# Altium schematic symbol library Silabs.SchLib: 89 symbols (part 1 of 2)
Pins are listed as number, name and electrical type; pins without a type are passive.

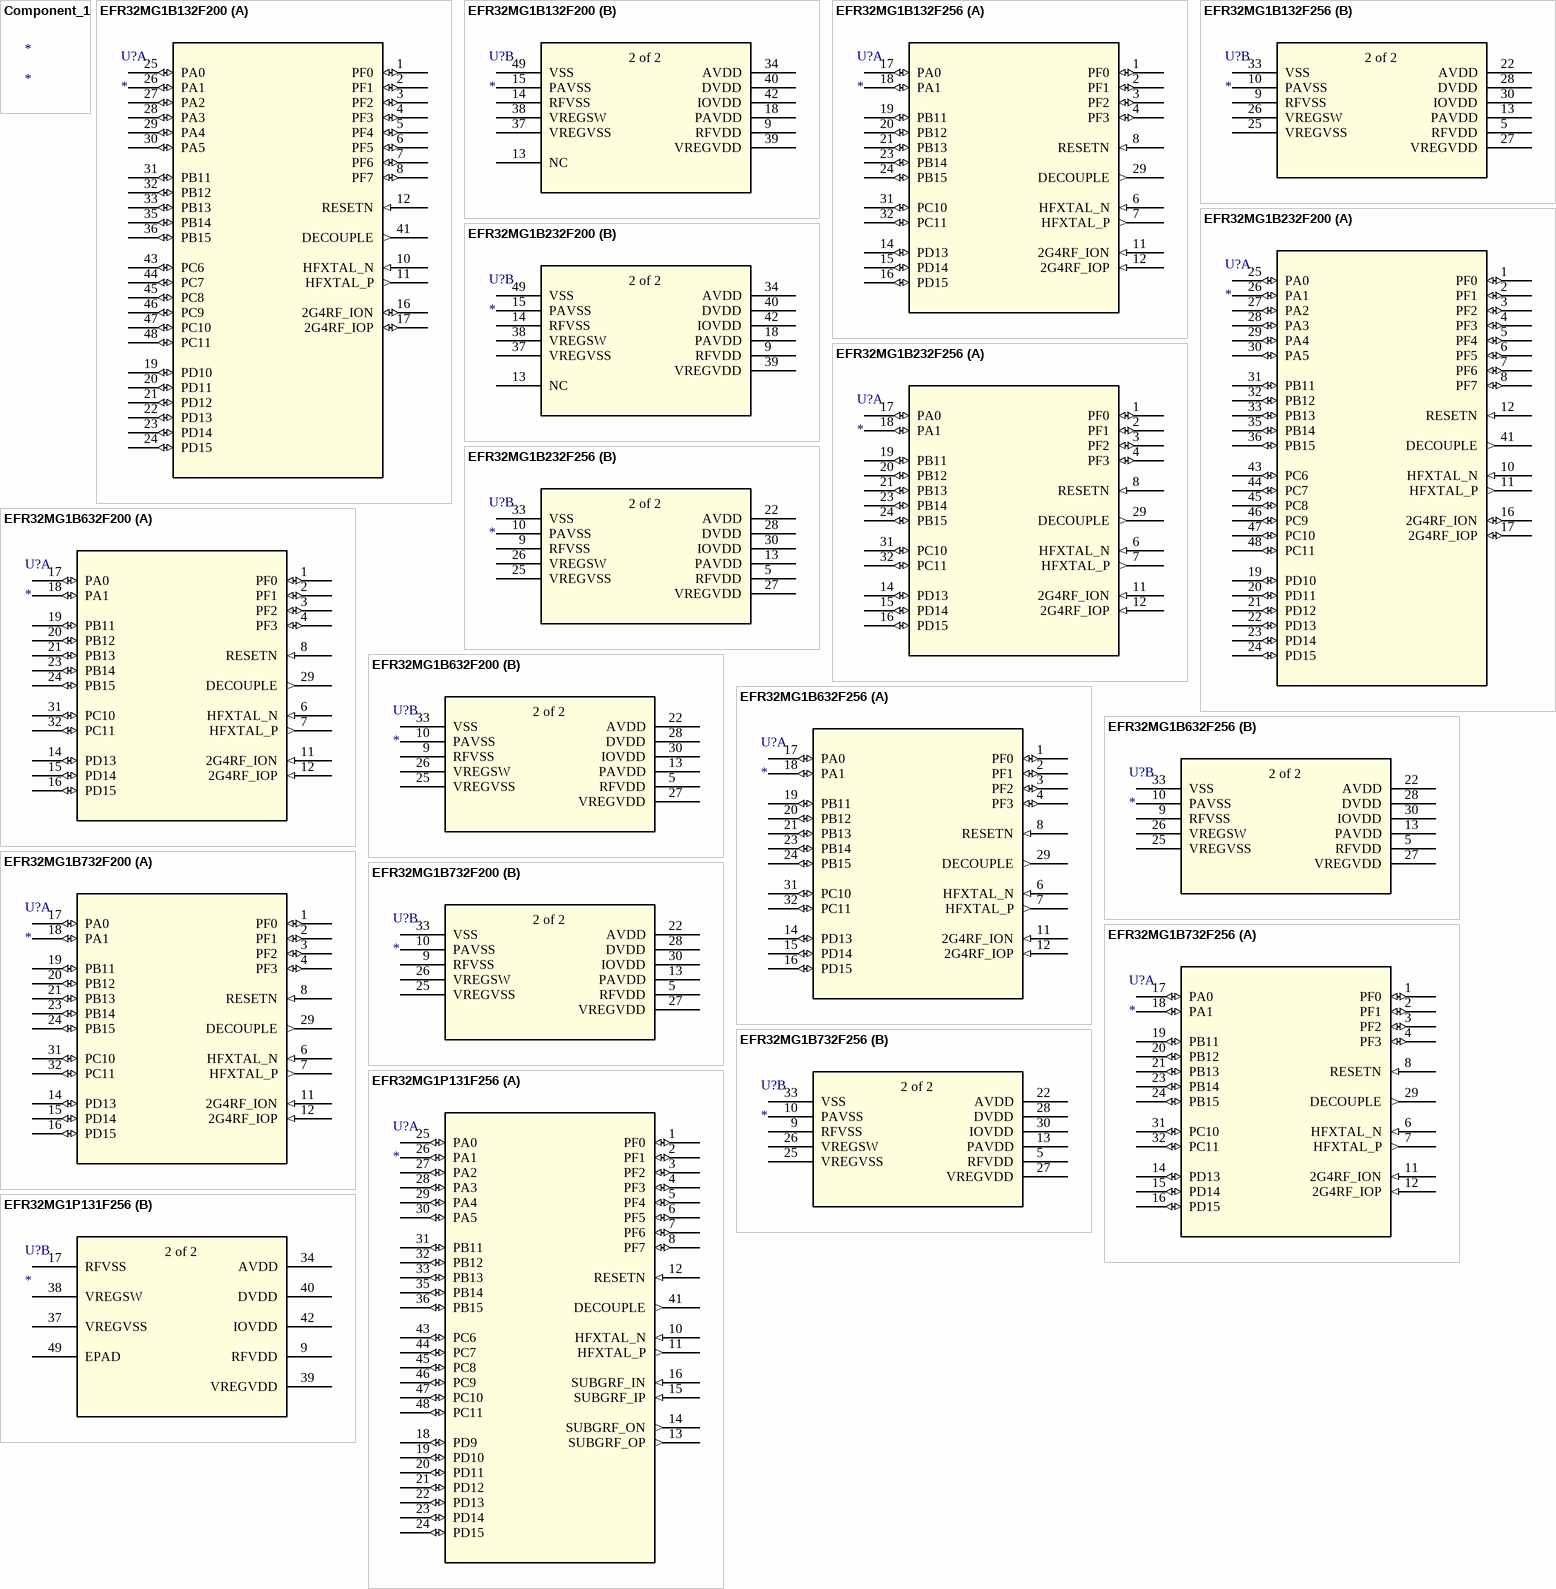
[diagram p0: symbols Component_1 to EFR32MG1P131F256]

## Component_1
designator *

## EFR32MG1B132F200
designator U?
No Description Available; RefDes: RefDes; Type: Type
footprint QFN48B_7X7
part A pins: 1 PF0 (io), 2 PF1 (io), 3 PF2 (io), 4 PF3 (io), 5 PF4 (io), 6 PF5 (io), 7 PF6 (io), 8 PF7 (io), 10 HFXTAL_N (in), 11 HFXTAL_P (out), 12 RESETN (in), 16 2G4RF_ION (io), 17 2G4RF_IOP (io), 19 PD10 (io), 20 PD11 (io), 21 PD12 (io), 22 PD13 (io), 23 PD14 (io), 24 PD15 (io), 25 PA0 (io), 26 PA1 (io), 27 PA2 (io), 28 PA3 (io), 29 PA4 (io), 30 PA5 (io), 31 PB11 (io), 32 PB12 (io), 33 PB13 (io), 35 PB14 (io), 36 PB15 (io), 41 DECOUPLE (out), 43 PC6 (io), 44 PC7 (io), 45 PC8 (io), 46 PC9 (io), 47 PC10 (io), 48 PC11 (io)
part B pins: 9 RFVDD (power), 13 NC, 14 RFVSS (power), 15 PAVSS (power), 18 PAVDD (power), 34 AVDD (power), 37 VREGVSS (power), 38 VREGSW (power), 39 VREGVDD (power), 40 DVDD (power), 42 IOVDD (power), 49 VSS (power)
part B text: 2 of 2

## EFR32MG1B132F256
designator U?
No Description Available; RefDes: RefDes; Type: Type
footprint QFN32_5X5
part A pins: 1 PF0 (io), 2 PF1 (io), 3 PF2 (io), 4 PF3 (io), 6 HFXTAL_N (in), 7 HFXTAL_P (out), 8 RESETN (in), 11 2G4RF_ION (in), 12 2G4RF_IOP (in), 14 PD13 (io), 15 PD14 (io), 16 PD15 (io), 17 PA0 (io), 18 PA1 (io), 19 PB11 (io), 20 PB12 (io), 21 PB13 (io), 23 PB14 (io), 24 PB15 (io), 29 DECOUPLE (out), 31 PC10 (io), 32 PC11 (io)
part B pins: 5 RFVDD (power), 9 RFVSS (power), 10 PAVSS (power), 13 PAVDD (power), 22 AVDD (power), 25 VREGVSS (power), 26 VREGSW (power), 27 VREGVDD (power), 28 DVDD (power), 30 IOVDD (power), 33 VSS (power)
part B text: 2 of 2

## EFR32MG1B232F200
designator U?
No Description Available; RefDes: RefDes; Type: Type
footprint QFN48B_7X7
part A pins: 1 PF0 (io), 2 PF1 (io), 3 PF2 (io), 4 PF3 (io), 5 PF4 (io), 6 PF5 (io), 7 PF6 (io), 8 PF7 (io), 10 HFXTAL_N (in), 11 HFXTAL_P (out), 12 RESETN (in), 16 2G4RF_ION (io), 17 2G4RF_IOP (io), 19 PD10 (io), 20 PD11 (io), 21 PD12 (io), 22 PD13 (io), 23 PD14 (io), 24 PD15 (io), 25 PA0 (io), 26 PA1 (io), 27 PA2 (io), 28 PA3 (io), 29 PA4 (io), 30 PA5 (io), 31 PB11 (io), 32 PB12 (io), 33 PB13 (io), 35 PB14 (io), 36 PB15 (io), 41 DECOUPLE (out), 43 PC6 (io), 44 PC7 (io), 45 PC8 (io), 46 PC9 (io), 47 PC10 (io), 48 PC11 (io)
part B pins: 9 RFVDD (power), 13 NC, 14 RFVSS (power), 15 PAVSS (power), 18 PAVDD (power), 34 AVDD (power), 37 VREGVSS (power), 38 VREGSW (power), 39 VREGVDD (power), 40 DVDD (power), 42 IOVDD (power), 49 VSS (power)
part B text: 2 of 2

## EFR32MG1B232F256
designator U?
No Description Available; RefDes: RefDes; Type: Type
footprint QFN32_5X5
part A pins: 1 PF0 (io), 2 PF1 (io), 3 PF2 (io), 4 PF3 (io), 6 HFXTAL_N (in), 7 HFXTAL_P (out), 8 RESETN (in), 11 2G4RF_ION (in), 12 2G4RF_IOP (in), 14 PD13 (io), 15 PD14 (io), 16 PD15 (io), 17 PA0 (io), 18 PA1 (io), 19 PB11 (io), 20 PB12 (io), 21 PB13 (io), 23 PB14 (io), 24 PB15 (io), 29 DECOUPLE (out), 31 PC10 (io), 32 PC11 (io)
part B pins: 5 RFVDD (power), 9 RFVSS (power), 10 PAVSS (power), 13 PAVDD (power), 22 AVDD (power), 25 VREGVSS (power), 26 VREGSW (power), 27 VREGVDD (power), 28 DVDD (power), 30 IOVDD (power), 33 VSS (power)
part B text: 2 of 2

## EFR32MG1B632F200
designator U?
No Description Available; RefDes: RefDes; Type: Type
footprint QFN32_5X5
part A pins: 1 PF0 (io), 2 PF1 (io), 3 PF2 (io), 4 PF3 (io), 6 HFXTAL_N (in), 7 HFXTAL_P (out), 8 RESETN (in), 11 2G4RF_ION (in), 12 2G4RF_IOP (in), 14 PD13 (io), 15 PD14 (io), 16 PD15 (io), 17 PA0 (io), 18 PA1 (io), 19 PB11 (io), 20 PB12 (io), 21 PB13 (io), 23 PB14 (io), 24 PB15 (io), 29 DECOUPLE (out), 31 PC10 (io), 32 PC11 (io)
part B pins: 5 RFVDD (power), 9 RFVSS (power), 10 PAVSS (power), 13 PAVDD (power), 22 AVDD (power), 25 VREGVSS (power), 26 VREGSW (power), 27 VREGVDD (power), 28 DVDD (power), 30 IOVDD (power), 33 VSS (power)
part B text: 2 of 2

## EFR32MG1B632F256
designator U?
No Description Available; RefDes: RefDes; Type: Type
footprint QFN32_5X5
part A pins: 1 PF0 (io), 2 PF1 (io), 3 PF2 (io), 4 PF3 (io), 6 HFXTAL_N (in), 7 HFXTAL_P (out), 8 RESETN (in), 11 2G4RF_ION (in), 12 2G4RF_IOP (in), 14 PD13 (io), 15 PD14 (io), 16 PD15 (io), 17 PA0 (io), 18 PA1 (io), 19 PB11 (io), 20 PB12 (io), 21 PB13 (io), 23 PB14 (io), 24 PB15 (io), 29 DECOUPLE (out), 31 PC10 (io), 32 PC11 (io)
part B pins: 5 RFVDD (power), 9 RFVSS (power), 10 PAVSS (power), 13 PAVDD (power), 22 AVDD (power), 25 VREGVSS (power), 26 VREGSW (power), 27 VREGVDD (power), 28 DVDD (power), 30 IOVDD (power), 33 VSS (power)
part B text: 2 of 2

## EFR32MG1B732F200
designator U?
No Description Available; RefDes: RefDes; Type: Type
footprint QFN32_5X5
part A pins: 1 PF0 (io), 2 PF1 (io), 3 PF2 (io), 4 PF3 (io), 6 HFXTAL_N (in), 7 HFXTAL_P (out), 8 RESETN (in), 11 2G4RF_ION (in), 12 2G4RF_IOP (in), 14 PD13 (io), 15 PD14 (io), 16 PD15 (io), 17 PA0 (io), 18 PA1 (io), 19 PB11 (io), 20 PB12 (io), 21 PB13 (io), 23 PB14 (io), 24 PB15 (io), 29 DECOUPLE (out), 31 PC10 (io), 32 PC11 (io)
part B pins: 5 RFVDD (power), 9 RFVSS (power), 10 PAVSS (power), 13 PAVDD (power), 22 AVDD (power), 25 VREGVSS (power), 26 VREGSW (power), 27 VREGVDD (power), 28 DVDD (power), 30 IOVDD (power), 33 VSS (power)
part B text: 2 of 2

## EFR32MG1B732F256
designator U?
No Description Available; RefDes: RefDes; Type: Type
footprint QFN32_5X5
part A pins: 1 PF0 (io), 2 PF1 (io), 3 PF2 (io), 4 PF3 (io), 6 HFXTAL_N (in), 7 HFXTAL_P (out), 8 RESETN (in), 11 2G4RF_ION (in), 12 2G4RF_IOP (in), 14 PD13 (io), 15 PD14 (io), 16 PD15 (io), 17 PA0 (io), 18 PA1 (io), 19 PB11 (io), 20 PB12 (io), 21 PB13 (io), 23 PB14 (io), 24 PB15 (io), 29 DECOUPLE (out), 31 PC10 (io), 32 PC11 (io)
part B pins: 5 RFVDD (power), 9 RFVSS (power), 10 PAVSS (power), 13 PAVDD (power), 22 AVDD (power), 25 VREGVSS (power), 26 VREGSW (power), 27 VREGVDD (power), 28 DVDD (power), 30 IOVDD (power), 33 VSS (power)
part B text: 2 of 2

## EFR32MG1P131F256
designator U?
No Description Available; RefDes: RefDes; Type: Type
footprint QFN48_7X7
part A pins: 1 PF0 (io), 2 PF1 (io), 3 PF2 (io), 4 PF3 (io), 5 PF4 (io), 6 PF5 (io), 7 PF6 (io), 8 PF7 (io), 10 HFXTAL_N (in), 11 HFXTAL_P (out), 12 RESETN (in), 13 SUBGRF_OP (out), 14 SUBGRF_ON (out), 15 SUBGRF_IP (in), 16 SUBGRF_IN (in), 18 PD9 (io), 19 PD10 (io), 20 PD11 (io), 21 PD12 (io), 22 PD13 (io), 23 PD14 (io), 24 PD15 (io), 25 PA0 (io), 26 PA1 (io), 27 PA2 (io), 28 PA3 (io), 29 PA4 (io), 30 PA5 (io), 31 PB11 (io), 32 PB12 (io), 33 PB13 (io), 35 PB14 (io), 36 PB15 (io), 41 DECOUPLE (out), 43 PC6 (io), 44 PC7 (io), 45 PC8 (io), 46 PC9 (io), 47 PC10 (io), 48 PC11 (io)
part B pins: 9 RFVDD (power), 17 RFVSS (power), 34 AVDD (power), 37 VREGVSS (power), 38 VREGSW (power), 39 VREGVDD (power), 40 DVDD (power), 42 IOVDD (power), 49 EPAD
part B text: 2 of 2

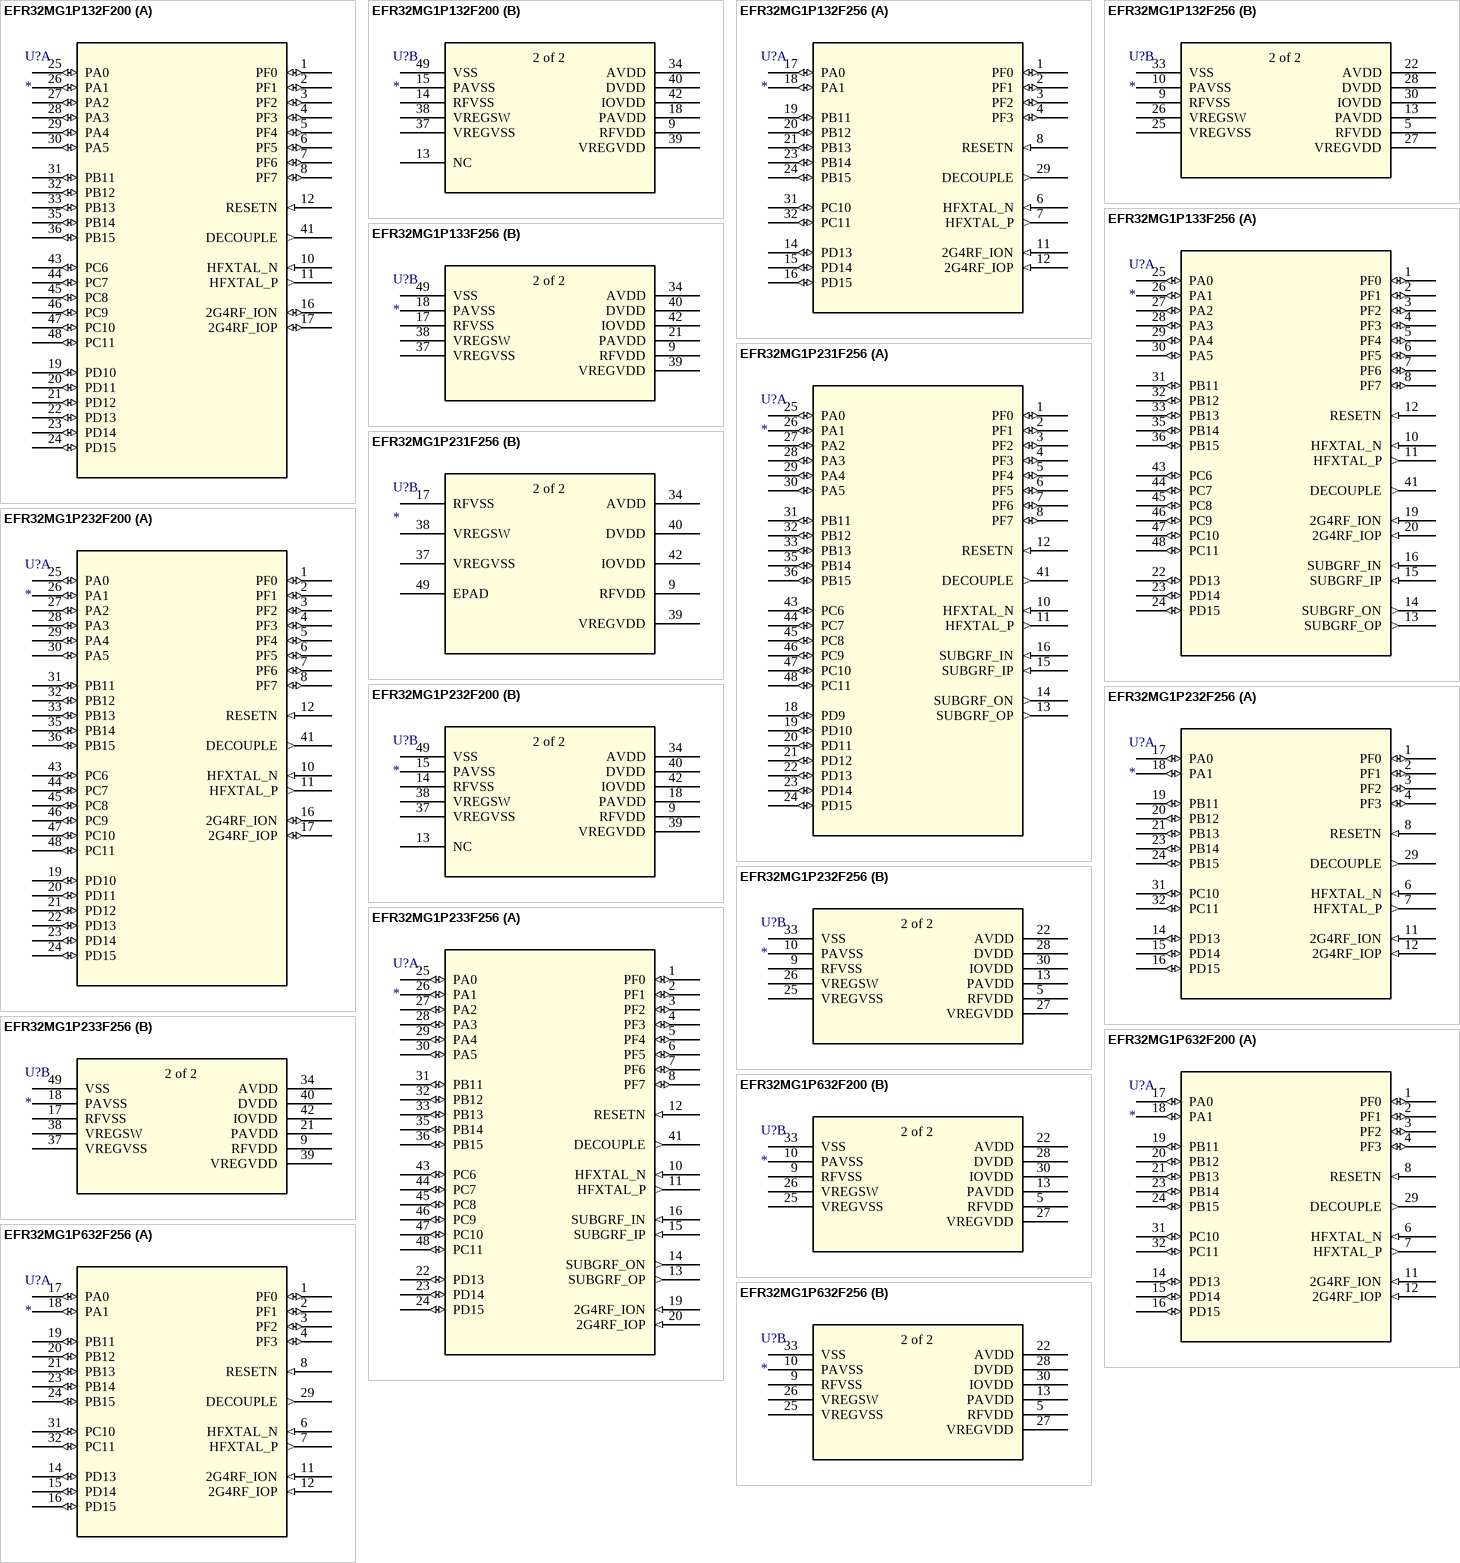
[diagram p1: symbols EFR32MG1P132F200 to EFR32MG1P632F256]

## EFR32MG1P132F200
designator U?
No Description Available; RefDes: RefDes; Type: Type
footprint QFN48B_7X7
part A pins: 1 PF0 (io), 2 PF1 (io), 3 PF2 (io), 4 PF3 (io), 5 PF4 (io), 6 PF5 (io), 7 PF6 (io), 8 PF7 (io), 10 HFXTAL_N (in), 11 HFXTAL_P (out), 12 RESETN (in), 16 2G4RF_ION (io), 17 2G4RF_IOP (io), 19 PD10 (io), 20 PD11 (io), 21 PD12 (io), 22 PD13 (io), 23 PD14 (io), 24 PD15 (io), 25 PA0 (io), 26 PA1 (io), 27 PA2 (io), 28 PA3 (io), 29 PA4 (io), 30 PA5 (io), 31 PB11 (io), 32 PB12 (io), 33 PB13 (io), 35 PB14 (io), 36 PB15 (io), 41 DECOUPLE (out), 43 PC6 (io), 44 PC7 (io), 45 PC8 (io), 46 PC9 (io), 47 PC10 (io), 48 PC11 (io)
part B pins: 9 RFVDD (power), 13 NC, 14 RFVSS (power), 15 PAVSS (power), 18 PAVDD (power), 34 AVDD (power), 37 VREGVSS (power), 38 VREGSW (power), 39 VREGVDD (power), 40 DVDD (power), 42 IOVDD (power), 49 VSS (power)
part B text: 2 of 2

## EFR32MG1P132F256
designator U?
No Description Available; RefDes: RefDes; Type: Type
footprint QFN32_5X5
part A pins: 1 PF0 (io), 2 PF1 (io), 3 PF2 (io), 4 PF3 (io), 6 HFXTAL_N (in), 7 HFXTAL_P (out), 8 RESETN (in), 11 2G4RF_ION (in), 12 2G4RF_IOP (in), 14 PD13 (io), 15 PD14 (io), 16 PD15 (io), 17 PA0 (io), 18 PA1 (io), 19 PB11 (io), 20 PB12 (io), 21 PB13 (io), 23 PB14 (io), 24 PB15 (io), 29 DECOUPLE (out), 31 PC10 (io), 32 PC11 (io)
part B pins: 5 RFVDD (power), 9 RFVSS (power), 10 PAVSS (power), 13 PAVDD (power), 22 AVDD (power), 25 VREGVSS (power), 26 VREGSW (power), 27 VREGVDD (power), 28 DVDD (power), 30 IOVDD (power), 33 VSS (power)
part B text: 2 of 2

## EFR32MG1P133F256
designator U?
No Description Available; RefDes: RefDes; Type: Type
footprint QFN48B_7X7
part A pins: 1 PF0 (io), 2 PF1 (io), 3 PF2 (io), 4 PF3 (io), 5 PF4 (io), 6 PF5 (io), 7 PF6 (io), 8 PF7 (io), 10 HFXTAL_N (in), 11 HFXTAL_P (out), 12 RESETN (in), 13 SUBGRF_OP (out), 14 SUBGRF_ON (out), 15 SUBGRF_IP (in), 16 SUBGRF_IN (in), 19 2G4RF_ION (in), 20 2G4RF_IOP (in), 22 PD13 (io), 23 PD14 (io), 24 PD15 (io), 25 PA0 (io), 26 PA1 (io), 27 PA2 (io), 28 PA3 (io), 29 PA4 (io), 30 PA5 (io), 31 PB11 (io), 32 PB12 (io), 33 PB13 (io), 35 PB14 (io), 36 PB15 (io), 41 DECOUPLE (out), 43 PC6 (io), 44 PC7 (io), 45 PC8 (io), 46 PC9 (io), 47 PC10 (io), 48 PC11 (io)
part B pins: 9 RFVDD (power), 17 RFVSS (power), 18 PAVSS (power), 21 PAVDD (power), 34 AVDD (power), 37 VREGVSS (power), 38 VREGSW (power), 39 VREGVDD (power), 40 DVDD (power), 42 IOVDD (power), 49 VSS (power)
part B text: 2 of 2

## EFR32MG1P231F256
designator U?
No Description Available; RefDes: RefDes; Type: Type
footprint QFN48_7X7
part A pins: 1 PF0 (io), 2 PF1 (io), 3 PF2 (io), 4 PF3 (io), 5 PF4 (io), 6 PF5 (io), 7 PF6 (io), 8 PF7 (io), 10 HFXTAL_N (in), 11 HFXTAL_P (out), 12 RESETN (in), 13 SUBGRF_OP (out), 14 SUBGRF_ON (out), 15 SUBGRF_IP (in), 16 SUBGRF_IN (in), 18 PD9 (io), 19 PD10 (io), 20 PD11 (io), 21 PD12 (io), 22 PD13 (io), 23 PD14 (io), 24 PD15 (io), 25 PA0 (io), 26 PA1 (io), 27 PA2 (io), 28 PA3 (io), 29 PA4 (io), 30 PA5 (io), 31 PB11 (io), 32 PB12 (io), 33 PB13 (io), 35 PB14 (io), 36 PB15 (io), 41 DECOUPLE (out), 43 PC6 (io), 44 PC7 (io), 45 PC8 (io), 46 PC9 (io), 47 PC10 (io), 48 PC11 (io)
part B pins: 9 RFVDD (power), 17 RFVSS (power), 34 AVDD (power), 37 VREGVSS (power), 38 VREGSW (power), 39 VREGVDD (power), 40 DVDD (power), 42 IOVDD (power), 49 EPAD
part B text: 2 of 2

## EFR32MG1P232F200
designator U?
No Description Available; RefDes: RefDes; Type: Type
footprint QFN48B_7X7
part A pins: 1 PF0 (io), 2 PF1 (io), 3 PF2 (io), 4 PF3 (io), 5 PF4 (io), 6 PF5 (io), 7 PF6 (io), 8 PF7 (io), 10 HFXTAL_N (in), 11 HFXTAL_P (out), 12 RESETN (in), 16 2G4RF_ION (io), 17 2G4RF_IOP (io), 19 PD10 (io), 20 PD11 (io), 21 PD12 (io), 22 PD13 (io), 23 PD14 (io), 24 PD15 (io), 25 PA0 (io), 26 PA1 (io), 27 PA2 (io), 28 PA3 (io), 29 PA4 (io), 30 PA5 (io), 31 PB11 (io), 32 PB12 (io), 33 PB13 (io), 35 PB14 (io), 36 PB15 (io), 41 DECOUPLE (out), 43 PC6 (io), 44 PC7 (io), 45 PC8 (io), 46 PC9 (io), 47 PC10 (io), 48 PC11 (io)
part B pins: 9 RFVDD (power), 13 NC, 14 RFVSS (power), 15 PAVSS (power), 18 PAVDD (power), 34 AVDD (power), 37 VREGVSS (power), 38 VREGSW (power), 39 VREGVDD (power), 40 DVDD (power), 42 IOVDD (power), 49 VSS (power)
part B text: 2 of 2

## EFR32MG1P232F256
designator U?
No Description Available; RefDes: RefDes; Type: Type
footprint QFN32_5X5
part A pins: 1 PF0 (io), 2 PF1 (io), 3 PF2 (io), 4 PF3 (io), 6 HFXTAL_N (in), 7 HFXTAL_P (out), 8 RESETN (in), 11 2G4RF_ION (in), 12 2G4RF_IOP (in), 14 PD13 (io), 15 PD14 (io), 16 PD15 (io), 17 PA0 (io), 18 PA1 (io), 19 PB11 (io), 20 PB12 (io), 21 PB13 (io), 23 PB14 (io), 24 PB15 (io), 29 DECOUPLE (out), 31 PC10 (io), 32 PC11 (io)
part B pins: 5 RFVDD (power), 9 RFVSS (power), 10 PAVSS (power), 13 PAVDD (power), 22 AVDD (power), 25 VREGVSS (power), 26 VREGSW (power), 27 VREGVDD (power), 28 DVDD (power), 30 IOVDD (power), 33 VSS (power)
part B text: 2 of 2

## EFR32MG1P233F256
designator U?
No Description Available; RefDes: RefDes; Type: Type
footprint QFN48B_7X7
part A pins: 1 PF0 (io), 2 PF1 (io), 3 PF2 (io), 4 PF3 (io), 5 PF4 (io), 6 PF5 (io), 7 PF6 (io), 8 PF7 (io), 10 HFXTAL_N (in), 11 HFXTAL_P (out), 12 RESETN (in), 13 SUBGRF_OP (out), 14 SUBGRF_ON (out), 15 SUBGRF_IP (in), 16 SUBGRF_IN (in), 19 2G4RF_ION (in), 20 2G4RF_IOP (in), 22 PD13 (io), 23 PD14 (io), 24 PD15 (io), 25 PA0 (io), 26 PA1 (io), 27 PA2 (io), 28 PA3 (io), 29 PA4 (io), 30 PA5 (io), 31 PB11 (io), 32 PB12 (io), 33 PB13 (io), 35 PB14 (io), 36 PB15 (io), 41 DECOUPLE (out), 43 PC6 (io), 44 PC7 (io), 45 PC8 (io), 46 PC9 (io), 47 PC10 (io), 48 PC11 (io)
part B pins: 9 RFVDD (power), 17 RFVSS (power), 18 PAVSS (power), 21 PAVDD (power), 34 AVDD (power), 37 VREGVSS (power), 38 VREGSW (power), 39 VREGVDD (power), 40 DVDD (power), 42 IOVDD (power), 49 VSS (power)
part B text: 2 of 2

## EFR32MG1P632F200
designator U?
No Description Available; RefDes: RefDes; Type: Type
footprint QFN32_5X5
part A pins: 1 PF0 (io), 2 PF1 (io), 3 PF2 (io), 4 PF3 (io), 6 HFXTAL_N (in), 7 HFXTAL_P (out), 8 RESETN (in), 11 2G4RF_ION (in), 12 2G4RF_IOP (in), 14 PD13 (io), 15 PD14 (io), 16 PD15 (io), 17 PA0 (io), 18 PA1 (io), 19 PB11 (io), 20 PB12 (io), 21 PB13 (io), 23 PB14 (io), 24 PB15 (io), 29 DECOUPLE (out), 31 PC10 (io), 32 PC11 (io)
part B pins: 5 RFVDD (power), 9 RFVSS (power), 10 PAVSS (power), 13 PAVDD (power), 22 AVDD (power), 25 VREGVSS (power), 26 VREGSW (power), 27 VREGVDD (power), 28 DVDD (power), 30 IOVDD (power), 33 VSS (power)
part B text: 2 of 2

## EFR32MG1P632F256
designator U?
No Description Available; RefDes: RefDes; Type: Type
footprint QFN32_5X5
part A pins: 1 PF0 (io), 2 PF1 (io), 3 PF2 (io), 4 PF3 (io), 6 HFXTAL_N (in), 7 HFXTAL_P (out), 8 RESETN (in), 11 2G4RF_ION (in), 12 2G4RF_IOP (in), 14 PD13 (io), 15 PD14 (io), 16 PD15 (io), 17 PA0 (io), 18 PA1 (io), 19 PB11 (io), 20 PB12 (io), 21 PB13 (io), 23 PB14 (io), 24 PB15 (io), 29 DECOUPLE (out), 31 PC10 (io), 32 PC11 (io)
part B pins: 5 RFVDD (power), 9 RFVSS (power), 10 PAVSS (power), 13 PAVDD (power), 22 AVDD (power), 25 VREGVSS (power), 26 VREGSW (power), 27 VREGVDD (power), 28 DVDD (power), 30 IOVDD (power), 33 VSS (power)
part B text: 2 of 2

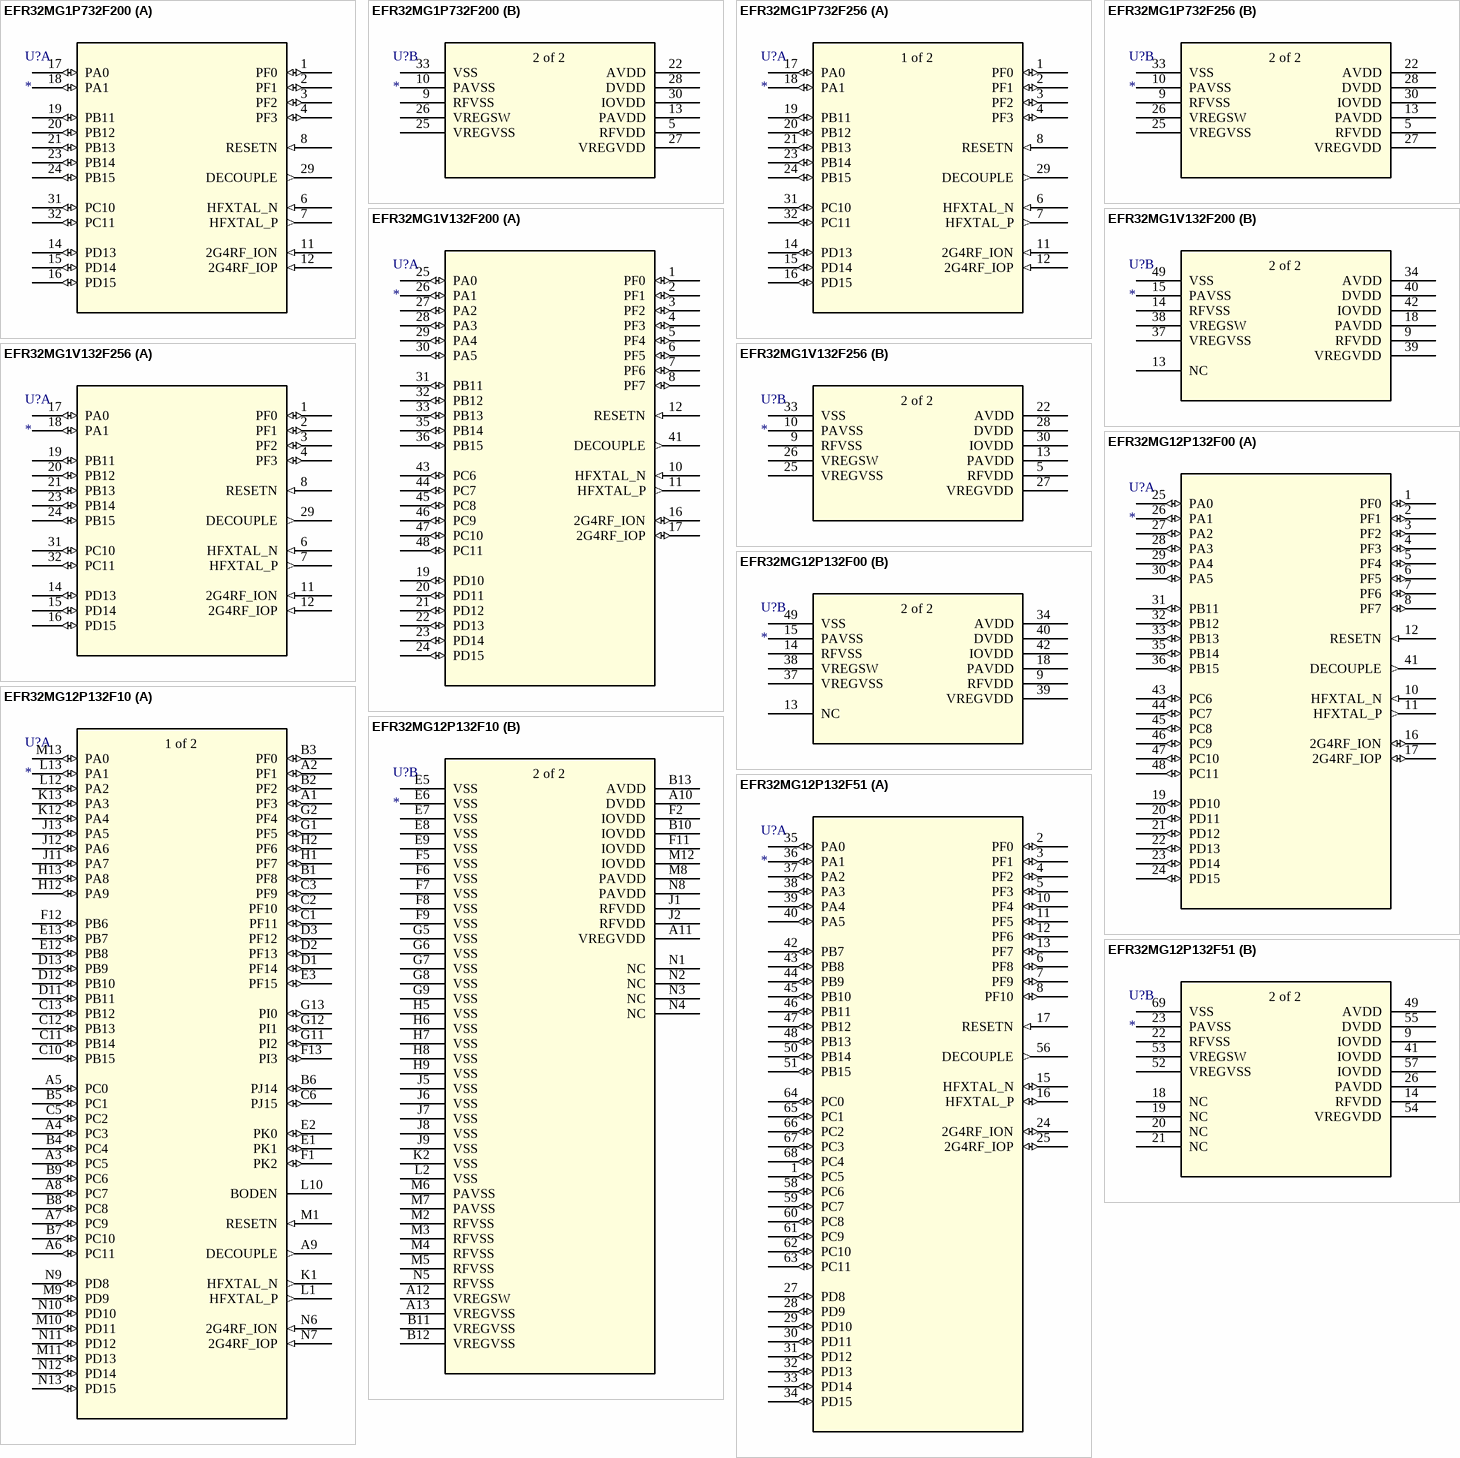
[diagram p2: symbols EFR32MG1P732F200 to EFR32MG12P132F51]

## EFR32MG1P732F200
designator U?
No Description Available; RefDes: RefDes; Type: Type
footprint QFN32_5X5
part A pins: 1 PF0 (io), 2 PF1 (io), 3 PF2 (io), 4 PF3 (io), 6 HFXTAL_N (in), 7 HFXTAL_P (out), 8 RESETN (in), 11 2G4RF_ION (in), 12 2G4RF_IOP (in), 14 PD13 (io), 15 PD14 (io), 16 PD15 (io), 17 PA0 (io), 18 PA1 (io), 19 PB11 (io), 20 PB12 (io), 21 PB13 (io), 23 PB14 (io), 24 PB15 (io), 29 DECOUPLE (out), 31 PC10 (io), 32 PC11 (io)
part B pins: 5 RFVDD (power), 9 RFVSS (power), 10 PAVSS (power), 13 PAVDD (power), 22 AVDD (power), 25 VREGVSS (power), 26 VREGSW (power), 27 VREGVDD (power), 28 DVDD (power), 30 IOVDD (power), 33 VSS (power)
part B text: 2 of 2

## EFR32MG1P732F256
designator U?
No Description Available; RefDes: RefDes; Type: Type
footprint QFN32_5X5
part A pins: 1 PF0 (io), 2 PF1 (io), 3 PF2 (io), 4 PF3 (io), 6 HFXTAL_N (in), 7 HFXTAL_P (out), 8 RESETN (in), 11 2G4RF_ION (in), 12 2G4RF_IOP (in), 14 PD13 (io), 15 PD14 (io), 16 PD15 (io), 17 PA0 (io), 18 PA1 (io), 19 PB11 (io), 20 PB12 (io), 21 PB13 (io), 23 PB14 (io), 24 PB15 (io), 29 DECOUPLE (out), 31 PC10 (io), 32 PC11 (io)
part B pins: 5 RFVDD (power), 9 RFVSS (power), 10 PAVSS (power), 13 PAVDD (power), 22 AVDD (power), 25 VREGVSS (power), 26 VREGSW (power), 27 VREGVDD (power), 28 DVDD (power), 30 IOVDD (power), 33 VSS (power)
part A text: 1 of 2
part B text: 2 of 2

## EFR32MG1V132F200
designator U?
No Description Available; RefDes: RefDes; Type: Type
footprint QFN48B_7X7
part A pins: 1 PF0 (io), 2 PF1 (io), 3 PF2 (io), 4 PF3 (io), 5 PF4 (io), 6 PF5 (io), 7 PF6 (io), 8 PF7 (io), 10 HFXTAL_N (in), 11 HFXTAL_P (out), 12 RESETN (in), 16 2G4RF_ION (io), 17 2G4RF_IOP (io), 19 PD10 (io), 20 PD11 (io), 21 PD12 (io), 22 PD13 (io), 23 PD14 (io), 24 PD15 (io), 25 PA0 (io), 26 PA1 (io), 27 PA2 (io), 28 PA3 (io), 29 PA4 (io), 30 PA5 (io), 31 PB11 (io), 32 PB12 (io), 33 PB13 (io), 35 PB14 (io), 36 PB15 (io), 41 DECOUPLE (out), 43 PC6 (io), 44 PC7 (io), 45 PC8 (io), 46 PC9 (io), 47 PC10 (io), 48 PC11 (io)
part B pins: 9 RFVDD (power), 13 NC, 14 RFVSS (power), 15 PAVSS (power), 18 PAVDD (power), 34 AVDD (power), 37 VREGVSS (power), 38 VREGSW (power), 39 VREGVDD (power), 40 DVDD (power), 42 IOVDD (power), 49 VSS (power)
part B text: 2 of 2

## EFR32MG1V132F256
designator U?
No Description Available; RefDes: RefDes; Type: Type
footprint QFN32_5X5
part A pins: 1 PF0 (io), 2 PF1 (io), 3 PF2 (io), 4 PF3 (io), 6 HFXTAL_N (in), 7 HFXTAL_P (out), 8 RESETN (in), 11 2G4RF_ION (in), 12 2G4RF_IOP (in), 14 PD13 (io), 15 PD14 (io), 16 PD15 (io), 17 PA0 (io), 18 PA1 (io), 19 PB11 (io), 20 PB12 (io), 21 PB13 (io), 23 PB14 (io), 24 PB15 (io), 29 DECOUPLE (out), 31 PC10 (io), 32 PC11 (io)
part B pins: 5 RFVDD (power), 9 RFVSS (power), 10 PAVSS (power), 13 PAVDD (power), 22 AVDD (power), 25 VREGVSS (power), 26 VREGSW (power), 27 VREGVDD (power), 28 DVDD (power), 30 IOVDD (power), 33 VSS (power)
part B text: 2 of 2

## EFR32MG12P132F00
designator U?
No Description Available; RefDes: RefDes; Type: Type
footprint QFN48B_7X7
part A pins: 1 PF0 (io), 2 PF1 (io), 3 PF2 (io), 4 PF3 (io), 5 PF4 (io), 6 PF5 (io), 7 PF6 (io), 8 PF7 (io), 10 HFXTAL_N (in), 11 HFXTAL_P (out), 12 RESETN (in), 16 2G4RF_ION (io), 17 2G4RF_IOP (io), 19 PD10 (io), 20 PD11 (io), 21 PD12 (io), 22 PD13 (io), 23 PD14 (io), 24 PD15 (io), 25 PA0 (io), 26 PA1 (io), 27 PA2 (io), 28 PA3 (io), 29 PA4 (io), 30 PA5 (io), 31 PB11 (io), 32 PB12 (io), 33 PB13 (io), 35 PB14 (io), 36 PB15 (io), 41 DECOUPLE (out), 43 PC6 (io), 44 PC7 (io), 45 PC8 (io), 46 PC9 (io), 47 PC10 (io), 48 PC11 (io)
part B pins: 9 RFVDD (power), 13 NC, 14 RFVSS (power), 15 PAVSS (power), 18 PAVDD (power), 34 AVDD (power), 37 VREGVSS (power), 38 VREGSW (power), 39 VREGVDD (power), 40 DVDD (power), 42 IOVDD (power), 49 VSS (power)
part B text: 2 of 2

## EFR32MG12P132F10
designator U?
No Description Available; RefDes: RefDes; Type: Type
footprint BGA125_7X7
part A pins: A1 PF3 (io), A2 PF1 (io), A3 PC5 (io), A4 PC3 (io), A5 PC0 (io), A6 PC11 (io), A7 PC9 (io), A8 PC7 (io), A9 DECOUPLE (out), B1 PF8 (io), B2 PF2 (io), B3 PF0 (io), B4 PC4 (io), B5 PC1 (io), B6 PJ14 (io), B7 PC10 (io), B8 PC8 (io), B9 PC6 (io), C1 PF11 (io), C2 PF10 (io), C3 PF9 (io), C5 PC2 (io), C6 PJ15 (io), C10 PB15 (io), C11 PB14 (io), C12 PB13 (io), C13 PB12 (io), D1 PF14 (io), D2 PF13 (io), D3 PF12 (io), D11 PB11 (io), D12 PB10 (io), D13 PB9 (io), E1 PK1 (io), E2 PK0 (io), E3 PF15 (io), E12 PB8 (io), E13 PB7 (io), F1 PK2 (io), F12 PB6 (io), F13 PI3 (io), G1 PF5 (io), G2 PF4 (io), G11 PI2 (io), G12 PI1 (io), G13 PI0 (io), H1 PF7 (io), H2 PF6 (io), H12 PA9 (io), H13 PA8 (io), J11 PA7 (io), J12 PA6 (io), J13 PA5 (io), K1 HFXTAL_N (out), K12 PA4 (io), K13 PA3 (io), L1 HFXTAL_P (out), L10 BODEN, L12 PA2 (io), L13 PA1 (io), M1 RESETN (in), M9 PD9 (io), M10 PD11 (io), M11 PD13 (io), M13 PA0 (io), N6 2G4RF_ION (in), N7 2G4RF_IOP (in), N9 PD8 (io), N10 PD10 (io), N11 PD12 (io), N12 PD14 (io), N13 PD15 (io)
part B pins: A10 DVDD (power), A11 VREGVDD (power), A12 VREGSW (power), A13 VREGVSS (power), B10 IOVDD (power), B11 VREGVSS (power), B12 VREGVSS (power), B13 AVDD (power), E5 VSS (power), E6 VSS (power), E7 VSS (power), E8 VSS (power), E9 VSS (power), F2 IOVDD (power), F5 VSS (power), F6 VSS (power), F7 VSS (power), F8 VSS (power), F9 VSS (power), F11 IOVDD (power), G5 VSS (power), G6 VSS (power), G7 VSS (power), G8 VSS (power), G9 VSS (power), H5 VSS (power), H6 VSS (power), H7 VSS (power), H8 VSS (power), H9 VSS (power), J1 RFVDD (power), J2 RFVDD (power), J5 VSS (power), J6 VSS (power), J7 VSS (power), J8 VSS (power), J9 VSS (power), K2 VSS (power), L2 VSS (power), M2 RFVSS (power), M3 RFVSS (power), M4 RFVSS (power), M5 RFVSS (power), M6 PAVSS (power), M7 PAVSS (power), M8 PAVDD (power), M12 IOVDD (power), N1 NC, N2 NC, N3 NC, N4 NC, N5 RFVSS (power), N8 PAVDD (power)
part A text: 1 of 2
part B text: 2 of 2

## EFR32MG12P132F51
designator U?
No Description Available; RefDes: RefDes; Type: Type
footprint QFN68_8X8
part A pins: 1 PC5 (io), 2 PF0 (io), 3 PF1 (io), 4 PF2 (io), 5 PF3 (io), 6 PF8 (io), 7 PF9 (io), 8 PF10 (io), 10 PF4 (io), 11 PF5 (io), 12 PF6 (io), 13 PF7 (io), 15 HFXTAL_N (io), 16 HFXTAL_P (io), 17 RESETN (in), 24 2G4RF_ION (io), 25 2G4RF_IOP (io), 27 PD8 (io), 28 PD9 (io), 29 PD10 (io), 30 PD11 (io), 31 PD12 (io), 32 PD13 (io), 33 PD14 (io), 34 PD15 (io), 35 PA0 (io), 36 PA1 (io), 37 PA2 (io), 38 PA3 (io), 39 PA4 (io), 40 PA5 (io), 42 PB7 (io), 43 PB8 (io), 44 PB9 (io), 45 PB10 (io), 46 PB11 (io), 47 PB12 (io), 48 PB13 (io), 50 PB14 (io), 51 PB15 (io), 56 DECOUPLE (out), 58 PC6 (io), 59 PC7 (io), 60 PC8 (io), 61 PC9 (io), 62 PC10 (io), 63 PC11 (io), 64 PC0 (io), 65 PC1 (io), 66 PC2 (io), 67 PC3 (io), 68 PC4 (io)
part B pins: 9 IOVDD (power), 14 RFVDD (power), 18 NC, 19 NC, 20 NC, 21 NC, 22 RFVSS (power), 23 PAVSS (power), 26 PAVDD (power), 41 IOVDD (power), 49 AVDD (power), 52 VREGVSS (power), 53 VREGSW (power), 54 VREGVDD (power), 55 DVDD (power), 57 IOVDD (power), 69 VSS (power)
part B text: 2 of 2

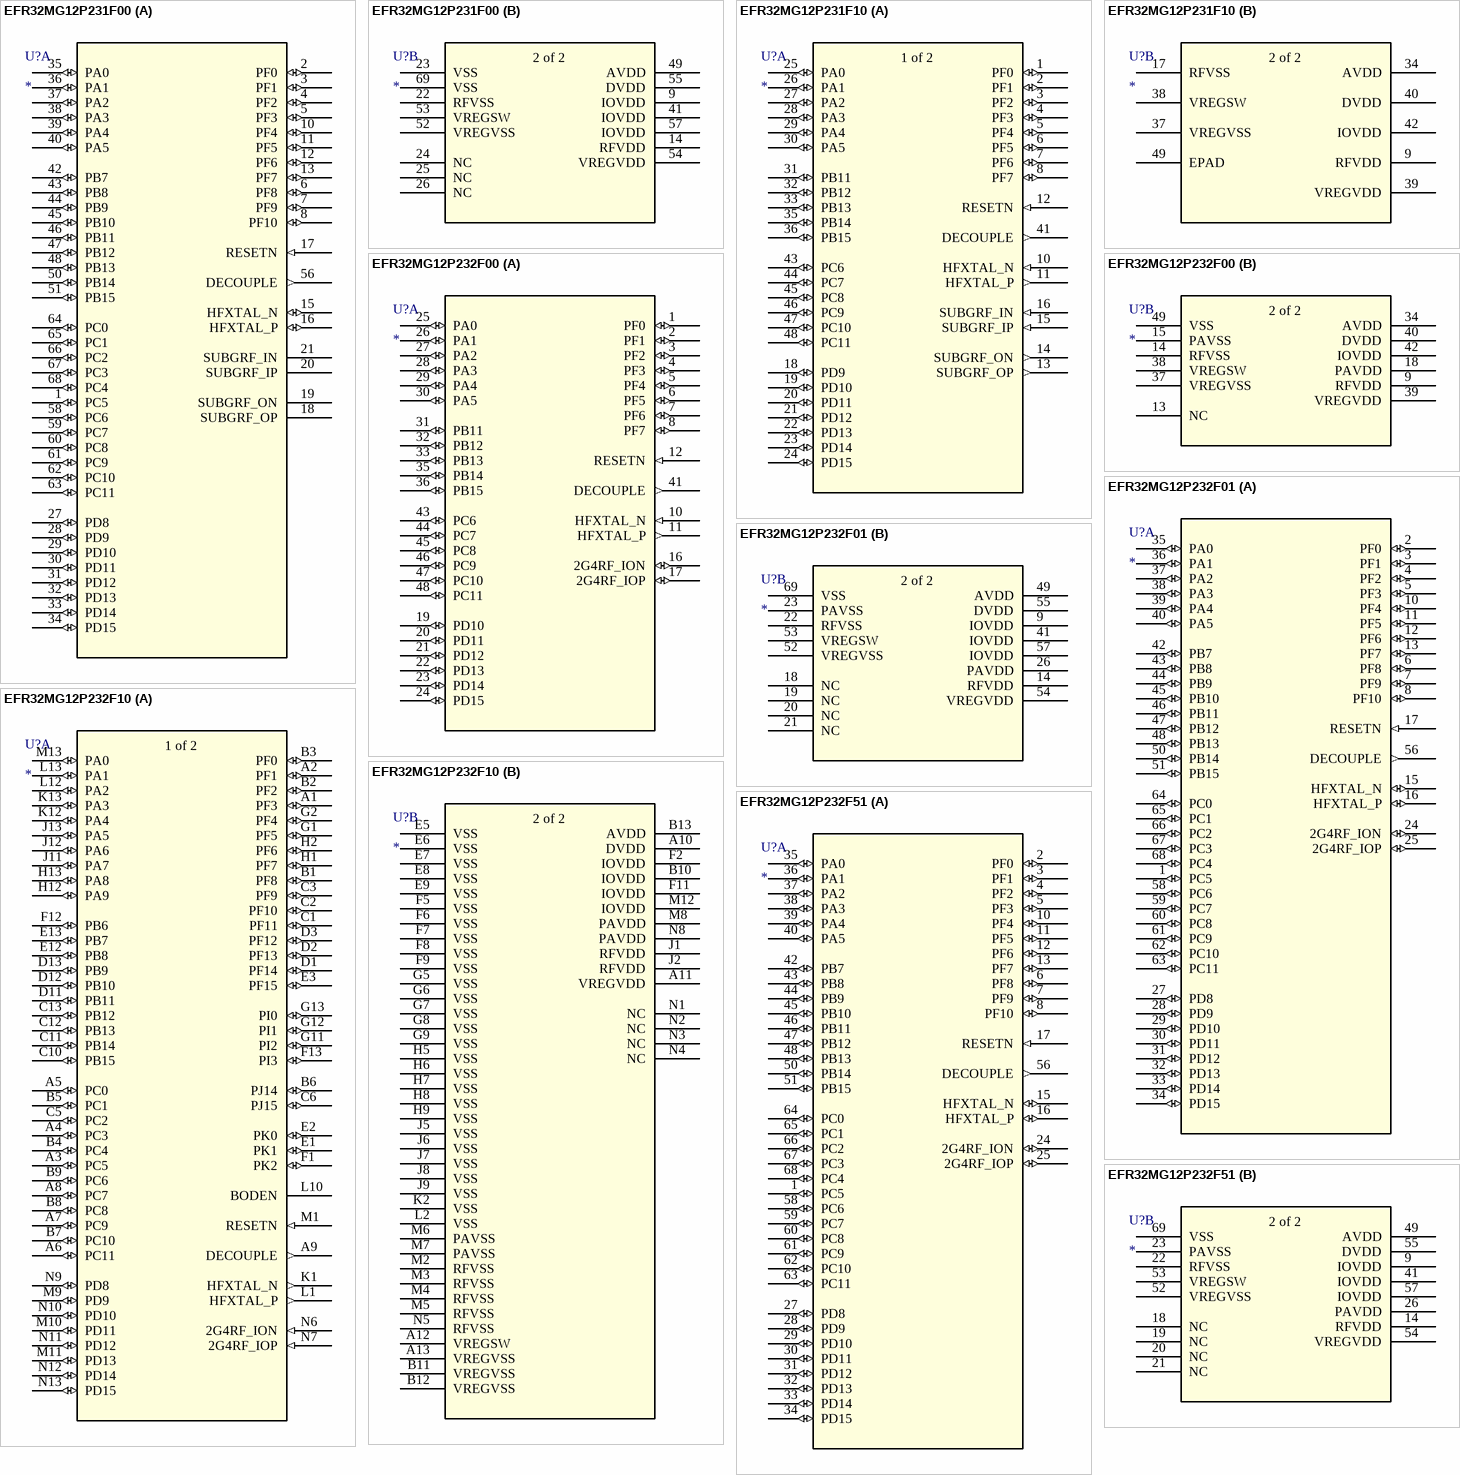
[diagram p3: symbols EFR32MG12P231F00 to EFR32MG12P232F51]

## EFR32MG12P231F00
designator U?
No Description Available; RefDes: RefDes; Type: Type
footprint QFN68_8X8
part A pins: 1 PC5 (io), 2 PF0 (io), 3 PF1 (io), 4 PF2 (io), 5 PF3 (io), 6 PF8 (io), 7 PF9 (io), 8 PF10 (io), 10 PF4 (io), 11 PF5 (io), 12 PF6 (io), 13 PF7 (io), 15 HFXTAL_N (io), 16 HFXTAL_P (io), 17 RESETN (in), 18 SUBGRF_OP, 19 SUBGRF_ON, 20 SUBGRF_IP, 21 SUBGRF_IN, 27 PD8 (io), 28 PD9 (io), 29 PD10 (io), 30 PD11 (io), 31 PD12 (io), 32 PD13 (io), 33 PD14 (io), 34 PD15 (io), 35 PA0 (io), 36 PA1 (io), 37 PA2 (io), 38 PA3 (io), 39 PA4 (io), 40 PA5 (io), 42 PB7 (io), 43 PB8 (io), 44 PB9 (io), 45 PB10 (io), 46 PB11 (io), 47 PB12 (io), 48 PB13 (io), 50 PB14 (io), 51 PB15 (io), 56 DECOUPLE (out), 58 PC6 (io), 59 PC7 (io), 60 PC8 (io), 61 PC9 (io), 62 PC10 (io), 63 PC11 (io), 64 PC0 (io), 65 PC1 (io), 66 PC2 (io), 67 PC3 (io), 68 PC4 (io)
part B pins: 9 IOVDD (power), 14 RFVDD (power), 22 RFVSS (power), 23 VSS (power), 24 NC, 25 NC, 26 NC, 41 IOVDD (power), 49 AVDD (power), 52 VREGVSS (power), 53 VREGSW (power), 54 VREGVDD (power), 55 DVDD (power), 57 IOVDD (power), 69 VSS (power)
part B text: 2 of 2

## EFR32MG12P231F10
designator U?
No Description Available; RefDes: RefDes; Type: Type
footprint QFN48_7X7_5p3epad
part A pins: 1 PF0 (io), 2 PF1 (io), 3 PF2 (io), 4 PF3 (io), 5 PF4 (io), 6 PF5 (io), 7 PF6 (io), 8 PF7 (io), 10 HFXTAL_N (in), 11 HFXTAL_P (out), 12 RESETN (in), 13 SUBGRF_OP (out), 14 SUBGRF_ON (out), 15 SUBGRF_IP (in), 16 SUBGRF_IN (in), 18 PD9 (io), 19 PD10 (io), 20 PD11 (io), 21 PD12 (io), 22 PD13 (io), 23 PD14 (io), 24 PD15 (io), 25 PA0 (io), 26 PA1 (io), 27 PA2 (io), 28 PA3 (io), 29 PA4 (io), 30 PA5 (io), 31 PB11 (io), 32 PB12 (io), 33 PB13 (io), 35 PB14 (io), 36 PB15 (io), 41 DECOUPLE (out), 43 PC6 (io), 44 PC7 (io), 45 PC8 (io), 46 PC9 (io), 47 PC10 (io), 48 PC11 (io)
part B pins: 9 RFVDD (power), 17 RFVSS (power), 34 AVDD (power), 37 VREGVSS (power), 38 VREGSW (power), 39 VREGVDD (power), 40 DVDD (power), 42 IOVDD (power), 49 EPAD
part A text: 1 of 2
part B text: 2 of 2

## EFR32MG12P232F00
designator U?
No Description Available; RefDes: RefDes; Type: Type
footprint QFN48B_7X7
part A pins: 1 PF0 (io), 2 PF1 (io), 3 PF2 (io), 4 PF3 (io), 5 PF4 (io), 6 PF5 (io), 7 PF6 (io), 8 PF7 (io), 10 HFXTAL_N (in), 11 HFXTAL_P (out), 12 RESETN (in), 16 2G4RF_ION (io), 17 2G4RF_IOP (io), 19 PD10 (io), 20 PD11 (io), 21 PD12 (io), 22 PD13 (io), 23 PD14 (io), 24 PD15 (io), 25 PA0 (io), 26 PA1 (io), 27 PA2 (io), 28 PA3 (io), 29 PA4 (io), 30 PA5 (io), 31 PB11 (io), 32 PB12 (io), 33 PB13 (io), 35 PB14 (io), 36 PB15 (io), 41 DECOUPLE (out), 43 PC6 (io), 44 PC7 (io), 45 PC8 (io), 46 PC9 (io), 47 PC10 (io), 48 PC11 (io)
part B pins: 9 RFVDD (power), 13 NC, 14 RFVSS (power), 15 PAVSS (power), 18 PAVDD (power), 34 AVDD (power), 37 VREGVSS (power), 38 VREGSW (power), 39 VREGVDD (power), 40 DVDD (power), 42 IOVDD (power), 49 VSS (power)
part B text: 2 of 2

## EFR32MG12P232F01
designator U?
No Description Available; RefDes: RefDes; Type: Type
footprint QFN68_8X8
part A pins: 1 PC5 (io), 2 PF0 (io), 3 PF1 (io), 4 PF2 (io), 5 PF3 (io), 6 PF8 (io), 7 PF9 (io), 8 PF10 (io), 10 PF4 (io), 11 PF5 (io), 12 PF6 (io), 13 PF7 (io), 15 HFXTAL_N (io), 16 HFXTAL_P (io), 17 RESETN (in), 24 2G4RF_ION (io), 25 2G4RF_IOP (io), 27 PD8 (io), 28 PD9 (io), 29 PD10 (io), 30 PD11 (io), 31 PD12 (io), 32 PD13 (io), 33 PD14 (io), 34 PD15 (io), 35 PA0 (io), 36 PA1 (io), 37 PA2 (io), 38 PA3 (io), 39 PA4 (io), 40 PA5 (io), 42 PB7 (io), 43 PB8 (io), 44 PB9 (io), 45 PB10 (io), 46 PB11 (io), 47 PB12 (io), 48 PB13 (io), 50 PB14 (io), 51 PB15 (io), 56 DECOUPLE (out), 58 PC6 (io), 59 PC7 (io), 60 PC8 (io), 61 PC9 (io), 62 PC10 (io), 63 PC11 (io), 64 PC0 (io), 65 PC1 (io), 66 PC2 (io), 67 PC3 (io), 68 PC4 (io)
part B pins: 9 IOVDD (power), 14 RFVDD (power), 18 NC, 19 NC, 20 NC, 21 NC, 22 RFVSS (power), 23 PAVSS (power), 26 PAVDD (power), 41 IOVDD (power), 49 AVDD (power), 52 VREGVSS (power), 53 VREGSW (power), 54 VREGVDD (power), 55 DVDD (power), 57 IOVDD (power), 69 VSS (power)
part B text: 2 of 2

## EFR32MG12P232F10
designator U?
No Description Available; RefDes: RefDes; Type: Type
footprint BGA125_7X7
part A pins: A1 PF3 (io), A2 PF1 (io), A3 PC5 (io), A4 PC3 (io), A5 PC0 (io), A6 PC11 (io), A7 PC9 (io), A8 PC7 (io), A9 DECOUPLE (out), B1 PF8 (io), B2 PF2 (io), B3 PF0 (io), B4 PC4 (io), B5 PC1 (io), B6 PJ14 (io), B7 PC10 (io), B8 PC8 (io), B9 PC6 (io), C1 PF11 (io), C2 PF10 (io), C3 PF9 (io), C5 PC2 (io), C6 PJ15 (io), C10 PB15 (io), C11 PB14 (io), C12 PB13 (io), C13 PB12 (io), D1 PF14 (io), D2 PF13 (io), D3 PF12 (io), D11 PB11 (io), D12 PB10 (io), D13 PB9 (io), E1 PK1 (io), E2 PK0 (io), E3 PF15 (io), E12 PB8 (io), E13 PB7 (io), F1 PK2 (io), F12 PB6 (io), F13 PI3 (io), G1 PF5 (io), G2 PF4 (io), G11 PI2 (io), G12 PI1 (io), G13 PI0 (io), H1 PF7 (io), H2 PF6 (io), H12 PA9 (io), H13 PA8 (io), J11 PA7 (io), J12 PA6 (io), J13 PA5 (io), K1 HFXTAL_N (out), K12 PA4 (io), K13 PA3 (io), L1 HFXTAL_P (out), L10 BODEN, L12 PA2 (io), L13 PA1 (io), M1 RESETN (in), M9 PD9 (io), M10 PD11 (io), M11 PD13 (io), M13 PA0 (io), N6 2G4RF_ION (in), N7 2G4RF_IOP (in), N9 PD8 (io), N10 PD10 (io), N11 PD12 (io), N12 PD14 (io), N13 PD15 (io)
part B pins: A10 DVDD (power), A11 VREGVDD (power), A12 VREGSW (power), A13 VREGVSS (power), B10 IOVDD (power), B11 VREGVSS (power), B12 VREGVSS (power), B13 AVDD (power), E5 VSS (power), E6 VSS (power), E7 VSS (power), E8 VSS (power), E9 VSS (power), F2 IOVDD (power), F5 VSS (power), F6 VSS (power), F7 VSS (power), F8 VSS (power), F9 VSS (power), F11 IOVDD (power), G5 VSS (power), G6 VSS (power), G7 VSS (power), G8 VSS (power), G9 VSS (power), H5 VSS (power), H6 VSS (power), H7 VSS (power), H8 VSS (power), H9 VSS (power), J1 RFVDD (power), J2 RFVDD (power), J5 VSS (power), J6 VSS (power), J7 VSS (power), J8 VSS (power), J9 VSS (power), K2 VSS (power), L2 VSS (power), M2 RFVSS (power), M3 RFVSS (power), M4 RFVSS (power), M5 RFVSS (power), M6 PAVSS (power), M7 PAVSS (power), M8 PAVDD (power), M12 IOVDD (power), N1 NC, N2 NC, N3 NC, N4 NC, N5 RFVSS (power), N8 PAVDD (power)
part A text: 1 of 2
part B text: 2 of 2

## EFR32MG12P232F51
designator U?
No Description Available; RefDes: RefDes; Type: Type
footprint QFN68_8X8
part A pins: 1 PC5 (io), 2 PF0 (io), 3 PF1 (io), 4 PF2 (io), 5 PF3 (io), 6 PF8 (io), 7 PF9 (io), 8 PF10 (io), 10 PF4 (io), 11 PF5 (io), 12 PF6 (io), 13 PF7 (io), 15 HFXTAL_N (io), 16 HFXTAL_P (io), 17 RESETN (in), 24 2G4RF_ION (io), 25 2G4RF_IOP (io), 27 PD8 (io), 28 PD9 (io), 29 PD10 (io), 30 PD11 (io), 31 PD12 (io), 32 PD13 (io), 33 PD14 (io), 34 PD15 (io), 35 PA0 (io), 36 PA1 (io), 37 PA2 (io), 38 PA3 (io), 39 PA4 (io), 40 PA5 (io), 42 PB7 (io), 43 PB8 (io), 44 PB9 (io), 45 PB10 (io), 46 PB11 (io), 47 PB12 (io), 48 PB13 (io), 50 PB14 (io), 51 PB15 (io), 56 DECOUPLE (out), 58 PC6 (io), 59 PC7 (io), 60 PC8 (io), 61 PC9 (io), 62 PC10 (io), 63 PC11 (io), 64 PC0 (io), 65 PC1 (io), 66 PC2 (io), 67 PC3 (io), 68 PC4 (io)
part B pins: 9 IOVDD (power), 14 RFVDD (power), 18 NC, 19 NC, 20 NC, 21 NC, 22 RFVSS (power), 23 PAVSS (power), 26 PAVDD (power), 41 IOVDD (power), 49 AVDD (power), 52 VREGVSS (power), 53 VREGSW (power), 54 VREGVDD (power), 55 DVDD (power), 57 IOVDD (power), 69 VSS (power)
part B text: 2 of 2

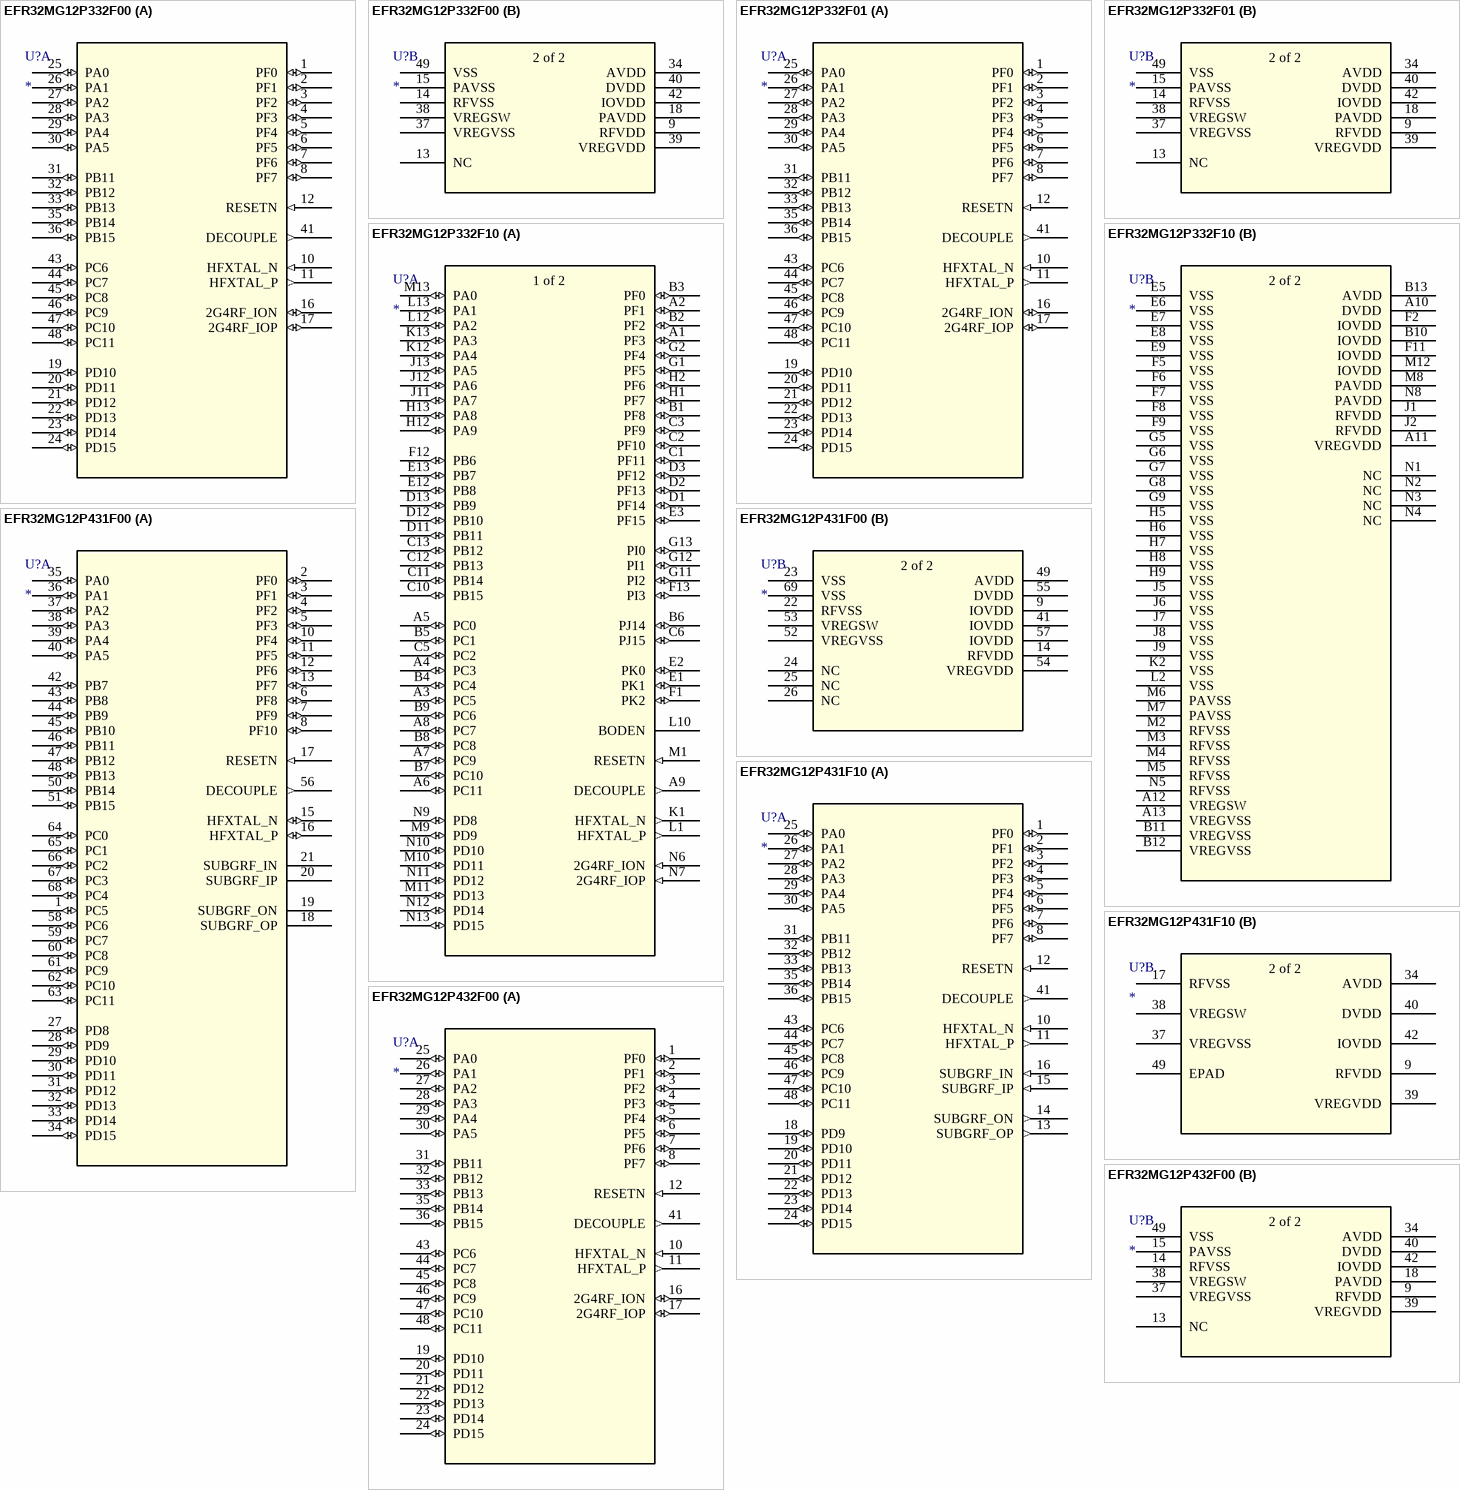
[diagram p4: symbols EFR32MG12P332F00 to EFR32MG12P432F00]

## EFR32MG12P332F00
designator U?
No Description Available; RefDes: RefDes; Type: Type
footprint QFN48B_7X7
part A pins: 1 PF0 (io), 2 PF1 (io), 3 PF2 (io), 4 PF3 (io), 5 PF4 (io), 6 PF5 (io), 7 PF6 (io), 8 PF7 (io), 10 HFXTAL_N (in), 11 HFXTAL_P (out), 12 RESETN (in), 16 2G4RF_ION (io), 17 2G4RF_IOP (io), 19 PD10 (io), 20 PD11 (io), 21 PD12 (io), 22 PD13 (io), 23 PD14 (io), 24 PD15 (io), 25 PA0 (io), 26 PA1 (io), 27 PA2 (io), 28 PA3 (io), 29 PA4 (io), 30 PA5 (io), 31 PB11 (io), 32 PB12 (io), 33 PB13 (io), 35 PB14 (io), 36 PB15 (io), 41 DECOUPLE (out), 43 PC6 (io), 44 PC7 (io), 45 PC8 (io), 46 PC9 (io), 47 PC10 (io), 48 PC11 (io)
part B pins: 9 RFVDD (power), 13 NC, 14 RFVSS (power), 15 PAVSS (power), 18 PAVDD (power), 34 AVDD (power), 37 VREGVSS (power), 38 VREGSW (power), 39 VREGVDD (power), 40 DVDD (power), 42 IOVDD (power), 49 VSS (power)
part B text: 2 of 2

## EFR32MG12P332F01
designator U?
No Description Available; RefDes: RefDes; Type: Type
footprint QFN48B_7X7
part A pins: 1 PF0 (io), 2 PF1 (io), 3 PF2 (io), 4 PF3 (io), 5 PF4 (io), 6 PF5 (io), 7 PF6 (io), 8 PF7 (io), 10 HFXTAL_N (in), 11 HFXTAL_P (out), 12 RESETN (in), 16 2G4RF_ION (io), 17 2G4RF_IOP (io), 19 PD10 (io), 20 PD11 (io), 21 PD12 (io), 22 PD13 (io), 23 PD14 (io), 24 PD15 (io), 25 PA0 (io), 26 PA1 (io), 27 PA2 (io), 28 PA3 (io), 29 PA4 (io), 30 PA5 (io), 31 PB11 (io), 32 PB12 (io), 33 PB13 (io), 35 PB14 (io), 36 PB15 (io), 41 DECOUPLE (out), 43 PC6 (io), 44 PC7 (io), 45 PC8 (io), 46 PC9 (io), 47 PC10 (io), 48 PC11 (io)
part B pins: 9 RFVDD (power), 13 NC, 14 RFVSS (power), 15 PAVSS (power), 18 PAVDD (power), 34 AVDD (power), 37 VREGVSS (power), 38 VREGSW (power), 39 VREGVDD (power), 40 DVDD (power), 42 IOVDD (power), 49 VSS (power)
part B text: 2 of 2

## EFR32MG12P332F10
designator U?
No Description Available; RefDes: RefDes; Type: Type
footprint BGA125_7X7
part A pins: A1 PF3 (io), A2 PF1 (io), A3 PC5 (io), A4 PC3 (io), A5 PC0 (io), A6 PC11 (io), A7 PC9 (io), A8 PC7 (io), A9 DECOUPLE (out), B1 PF8 (io), B2 PF2 (io), B3 PF0 (io), B4 PC4 (io), B5 PC1 (io), B6 PJ14 (io), B7 PC10 (io), B8 PC8 (io), B9 PC6 (io), C1 PF11 (io), C2 PF10 (io), C3 PF9 (io), C5 PC2 (io), C6 PJ15 (io), C10 PB15 (io), C11 PB14 (io), C12 PB13 (io), C13 PB12 (io), D1 PF14 (io), D2 PF13 (io), D3 PF12 (io), D11 PB11 (io), D12 PB10 (io), D13 PB9 (io), E1 PK1 (io), E2 PK0 (io), E3 PF15 (io), E12 PB8 (io), E13 PB7 (io), F1 PK2 (io), F12 PB6 (io), F13 PI3 (io), G1 PF5 (io), G2 PF4 (io), G11 PI2 (io), G12 PI1 (io), G13 PI0 (io), H1 PF7 (io), H2 PF6 (io), H12 PA9 (io), H13 PA8 (io), J11 PA7 (io), J12 PA6 (io), J13 PA5 (io), K1 HFXTAL_N (out), K12 PA4 (io), K13 PA3 (io), L1 HFXTAL_P (out), L10 BODEN, L12 PA2 (io), L13 PA1 (io), M1 RESETN (in), M9 PD9 (io), M10 PD11 (io), M11 PD13 (io), M13 PA0 (io), N6 2G4RF_ION (in), N7 2G4RF_IOP (in), N9 PD8 (io), N10 PD10 (io), N11 PD12 (io), N12 PD14 (io), N13 PD15 (io)
part B pins: A10 DVDD (power), A11 VREGVDD (power), A12 VREGSW (power), A13 VREGVSS (power), B10 IOVDD (power), B11 VREGVSS (power), B12 VREGVSS (power), B13 AVDD (power), E5 VSS (power), E6 VSS (power), E7 VSS (power), E8 VSS (power), E9 VSS (power), F2 IOVDD (power), F5 VSS (power), F6 VSS (power), F7 VSS (power), F8 VSS (power), F9 VSS (power), F11 IOVDD (power), G5 VSS (power), G6 VSS (power), G7 VSS (power), G8 VSS (power), G9 VSS (power), H5 VSS (power), H6 VSS (power), H7 VSS (power), H8 VSS (power), H9 VSS (power), J1 RFVDD (power), J2 RFVDD (power), J5 VSS (power), J6 VSS (power), J7 VSS (power), J8 VSS (power), J9 VSS (power), K2 VSS (power), L2 VSS (power), M2 RFVSS (power), M3 RFVSS (power), M4 RFVSS (power), M5 RFVSS (power), M6 PAVSS (power), M7 PAVSS (power), M8 PAVDD (power), M12 IOVDD (power), N1 NC, N2 NC, N3 NC, N4 NC, N5 RFVSS (power), N8 PAVDD (power)
part A text: 1 of 2
part B text: 2 of 2

## EFR32MG12P431F00
designator U?
No Description Available; RefDes: RefDes; Type: Type
footprint QFN68_8X8
part A pins: 1 PC5 (io), 2 PF0 (io), 3 PF1 (io), 4 PF2 (io), 5 PF3 (io), 6 PF8 (io), 7 PF9 (io), 8 PF10 (io), 10 PF4 (io), 11 PF5 (io), 12 PF6 (io), 13 PF7 (io), 15 HFXTAL_N (io), 16 HFXTAL_P (io), 17 RESETN (in), 18 SUBGRF_OP, 19 SUBGRF_ON, 20 SUBGRF_IP, 21 SUBGRF_IN, 27 PD8 (io), 28 PD9 (io), 29 PD10 (io), 30 PD11 (io), 31 PD12 (io), 32 PD13 (io), 33 PD14 (io), 34 PD15 (io), 35 PA0 (io), 36 PA1 (io), 37 PA2 (io), 38 PA3 (io), 39 PA4 (io), 40 PA5 (io), 42 PB7 (io), 43 PB8 (io), 44 PB9 (io), 45 PB10 (io), 46 PB11 (io), 47 PB12 (io), 48 PB13 (io), 50 PB14 (io), 51 PB15 (io), 56 DECOUPLE (out), 58 PC6 (io), 59 PC7 (io), 60 PC8 (io), 61 PC9 (io), 62 PC10 (io), 63 PC11 (io), 64 PC0 (io), 65 PC1 (io), 66 PC2 (io), 67 PC3 (io), 68 PC4 (io)
part B pins: 9 IOVDD (power), 14 RFVDD (power), 22 RFVSS (power), 23 VSS (power), 24 NC, 25 NC, 26 NC, 41 IOVDD (power), 49 AVDD (power), 52 VREGVSS (power), 53 VREGSW (power), 54 VREGVDD (power), 55 DVDD (power), 57 IOVDD (power), 69 VSS (power)
part B text: 2 of 2

## EFR32MG12P431F10
designator U?
No Description Available; RefDes: RefDes; Type: Type
footprint QFN48_7X7_5p3epad
part A pins: 1 PF0 (io), 2 PF1 (io), 3 PF2 (io), 4 PF3 (io), 5 PF4 (io), 6 PF5 (io), 7 PF6 (io), 8 PF7 (io), 10 HFXTAL_N (in), 11 HFXTAL_P (out), 12 RESETN (in), 13 SUBGRF_OP (out), 14 SUBGRF_ON (out), 15 SUBGRF_IP (in), 16 SUBGRF_IN (in), 18 PD9 (io), 19 PD10 (io), 20 PD11 (io), 21 PD12 (io), 22 PD13 (io), 23 PD14 (io), 24 PD15 (io), 25 PA0 (io), 26 PA1 (io), 27 PA2 (io), 28 PA3 (io), 29 PA4 (io), 30 PA5 (io), 31 PB11 (io), 32 PB12 (io), 33 PB13 (io), 35 PB14 (io), 36 PB15 (io), 41 DECOUPLE (out), 43 PC6 (io), 44 PC7 (io), 45 PC8 (io), 46 PC9 (io), 47 PC10 (io), 48 PC11 (io)
part B pins: 9 RFVDD (power), 17 RFVSS (power), 34 AVDD (power), 37 VREGVSS (power), 38 VREGSW (power), 39 VREGVDD (power), 40 DVDD (power), 42 IOVDD (power), 49 EPAD
part B text: 2 of 2

## EFR32MG12P432F00
designator U?
No Description Available; RefDes: RefDes; Type: Type
footprint QFN48B_7X7
part A pins: 1 PF0 (io), 2 PF1 (io), 3 PF2 (io), 4 PF3 (io), 5 PF4 (io), 6 PF5 (io), 7 PF6 (io), 8 PF7 (io), 10 HFXTAL_N (in), 11 HFXTAL_P (out), 12 RESETN (in), 16 2G4RF_ION (io), 17 2G4RF_IOP (io), 19 PD10 (io), 20 PD11 (io), 21 PD12 (io), 22 PD13 (io), 23 PD14 (io), 24 PD15 (io), 25 PA0 (io), 26 PA1 (io), 27 PA2 (io), 28 PA3 (io), 29 PA4 (io), 30 PA5 (io), 31 PB11 (io), 32 PB12 (io), 33 PB13 (io), 35 PB14 (io), 36 PB15 (io), 41 DECOUPLE (out), 43 PC6 (io), 44 PC7 (io), 45 PC8 (io), 46 PC9 (io), 47 PC10 (io), 48 PC11 (io)
part B pins: 9 RFVDD (power), 13 NC, 14 RFVSS (power), 15 PAVSS (power), 18 PAVDD (power), 34 AVDD (power), 37 VREGVSS (power), 38 VREGSW (power), 39 VREGVDD (power), 40 DVDD (power), 42 IOVDD (power), 49 VSS (power)
part B text: 2 of 2

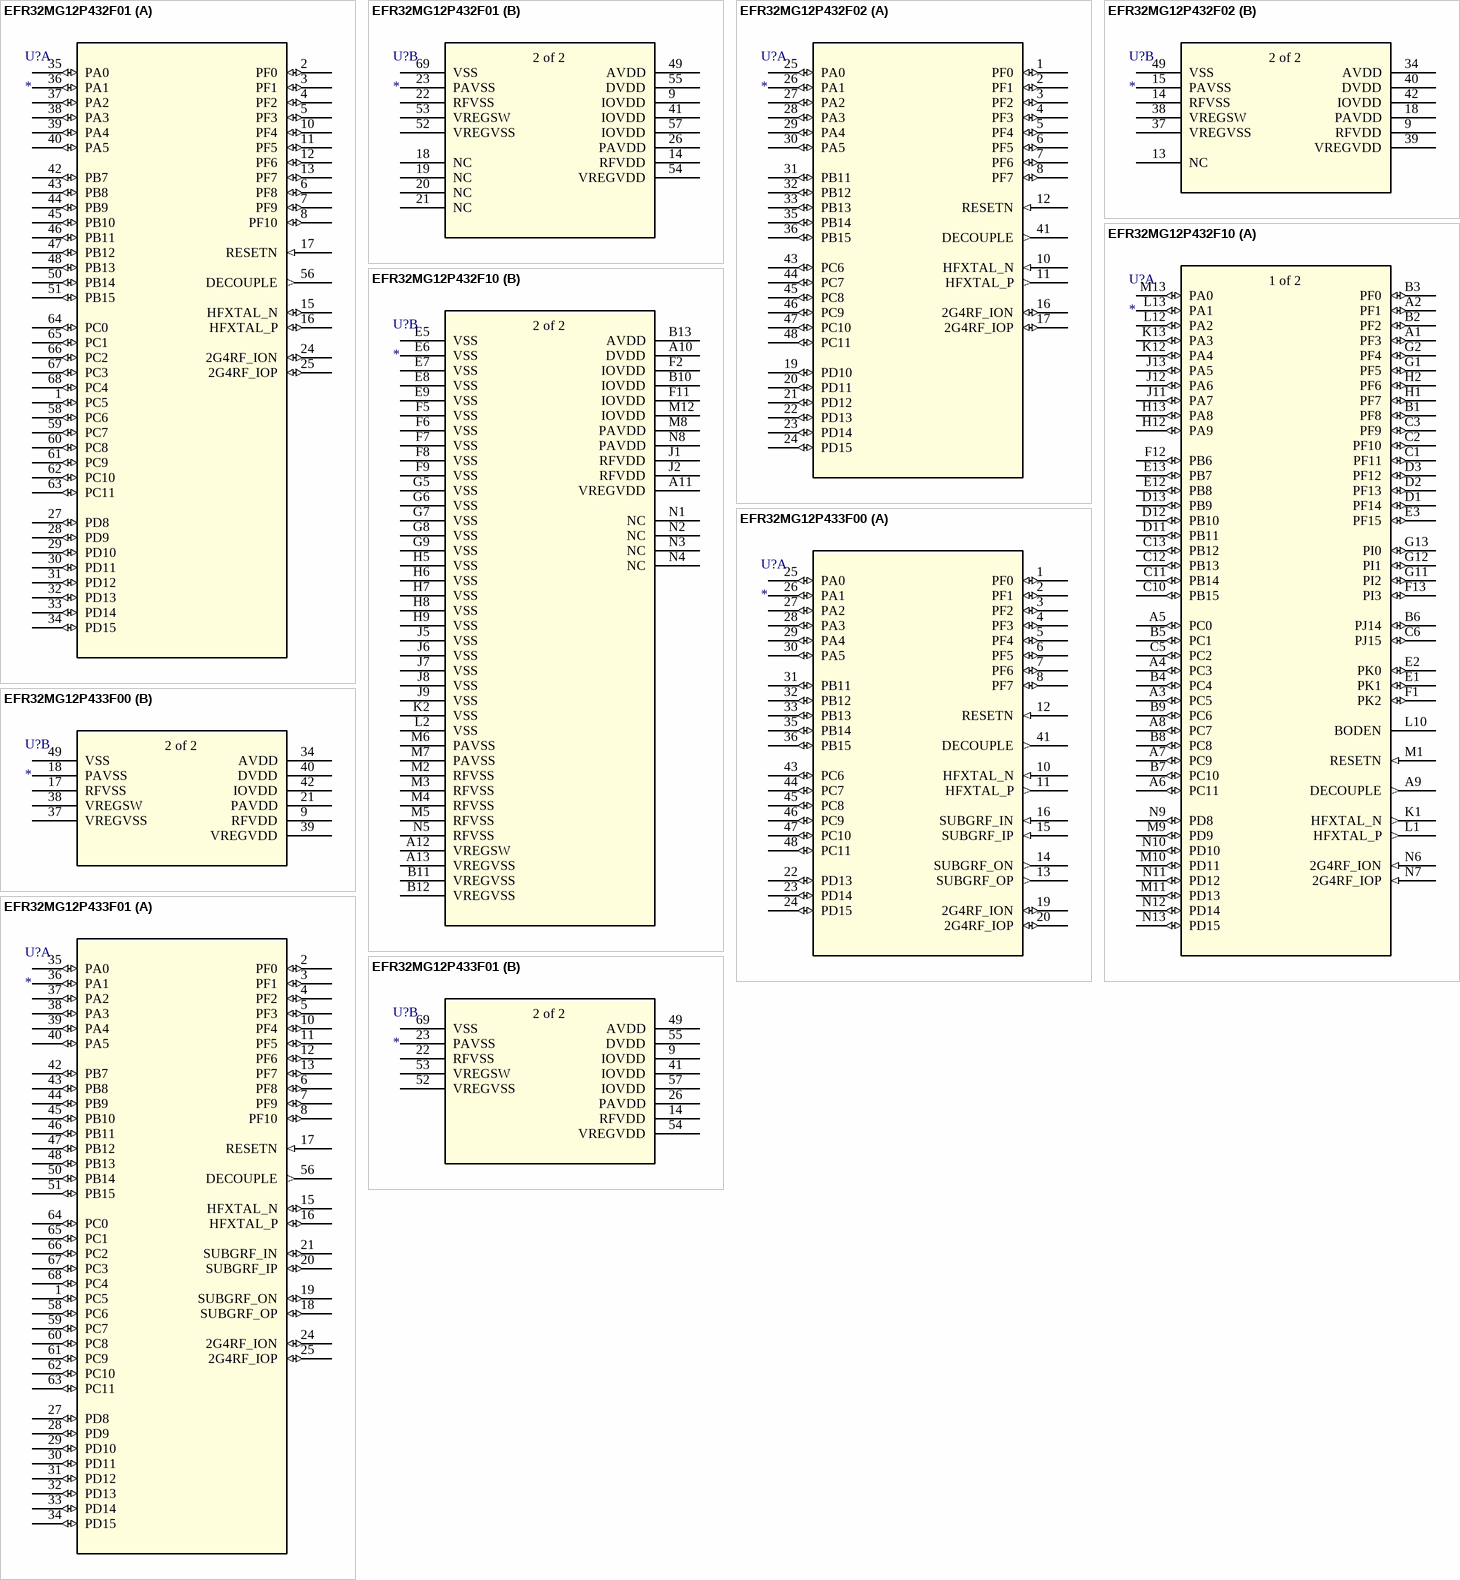
[diagram p5: symbols EFR32MG12P432F01 to EFR32MG12P433F01]

## EFR32MG12P432F01
designator U?
No Description Available; RefDes: RefDes; Type: Type
footprint QFN68_8X8
part A pins: 1 PC5 (io), 2 PF0 (io), 3 PF1 (io), 4 PF2 (io), 5 PF3 (io), 6 PF8 (io), 7 PF9 (io), 8 PF10 (io), 10 PF4 (io), 11 PF5 (io), 12 PF6 (io), 13 PF7 (io), 15 HFXTAL_N (io), 16 HFXTAL_P (io), 17 RESETN (in), 24 2G4RF_ION (io), 25 2G4RF_IOP (io), 27 PD8 (io), 28 PD9 (io), 29 PD10 (io), 30 PD11 (io), 31 PD12 (io), 32 PD13 (io), 33 PD14 (io), 34 PD15 (io), 35 PA0 (io), 36 PA1 (io), 37 PA2 (io), 38 PA3 (io), 39 PA4 (io), 40 PA5 (io), 42 PB7 (io), 43 PB8 (io), 44 PB9 (io), 45 PB10 (io), 46 PB11 (io), 47 PB12 (io), 48 PB13 (io), 50 PB14 (io), 51 PB15 (io), 56 DECOUPLE (out), 58 PC6 (io), 59 PC7 (io), 60 PC8 (io), 61 PC9 (io), 62 PC10 (io), 63 PC11 (io), 64 PC0 (io), 65 PC1 (io), 66 PC2 (io), 67 PC3 (io), 68 PC4 (io)
part B pins: 9 IOVDD (power), 14 RFVDD (power), 18 NC, 19 NC, 20 NC, 21 NC, 22 RFVSS (power), 23 PAVSS (power), 26 PAVDD (power), 41 IOVDD (power), 49 AVDD (power), 52 VREGVSS (power), 53 VREGSW (power), 54 VREGVDD (power), 55 DVDD (power), 57 IOVDD (power), 69 VSS (power)
part B text: 2 of 2

## EFR32MG12P432F02
designator U?
No Description Available; RefDes: RefDes; Type: Type
footprint QFN48B_7X7
part A pins: 1 PF0 (io), 2 PF1 (io), 3 PF2 (io), 4 PF3 (io), 5 PF4 (io), 6 PF5 (io), 7 PF6 (io), 8 PF7 (io), 10 HFXTAL_N (in), 11 HFXTAL_P (out), 12 RESETN (in), 16 2G4RF_ION (io), 17 2G4RF_IOP (io), 19 PD10 (io), 20 PD11 (io), 21 PD12 (io), 22 PD13 (io), 23 PD14 (io), 24 PD15 (io), 25 PA0 (io), 26 PA1 (io), 27 PA2 (io), 28 PA3 (io), 29 PA4 (io), 30 PA5 (io), 31 PB11 (io), 32 PB12 (io), 33 PB13 (io), 35 PB14 (io), 36 PB15 (io), 41 DECOUPLE (out), 43 PC6 (io), 44 PC7 (io), 45 PC8 (io), 46 PC9 (io), 47 PC10 (io), 48 PC11 (io)
part B pins: 9 RFVDD (power), 13 NC, 14 RFVSS (power), 15 PAVSS (power), 18 PAVDD (power), 34 AVDD (power), 37 VREGVSS (power), 38 VREGSW (power), 39 VREGVDD (power), 40 DVDD (power), 42 IOVDD (power), 49 VSS (power)
part B text: 2 of 2

## EFR32MG12P432F10
designator U?
No Description Available; RefDes: RefDes; Type: Type
footprint BGA125_7X7
part A pins: A1 PF3 (io), A2 PF1 (io), A3 PC5 (io), A4 PC3 (io), A5 PC0 (io), A6 PC11 (io), A7 PC9 (io), A8 PC7 (io), A9 DECOUPLE (out), B1 PF8 (io), B2 PF2 (io), B3 PF0 (io), B4 PC4 (io), B5 PC1 (io), B6 PJ14 (io), B7 PC10 (io), B8 PC8 (io), B9 PC6 (io), C1 PF11 (io), C2 PF10 (io), C3 PF9 (io), C5 PC2 (io), C6 PJ15 (io), C10 PB15 (io), C11 PB14 (io), C12 PB13 (io), C13 PB12 (io), D1 PF14 (io), D2 PF13 (io), D3 PF12 (io), D11 PB11 (io), D12 PB10 (io), D13 PB9 (io), E1 PK1 (io), E2 PK0 (io), E3 PF15 (io), E12 PB8 (io), E13 PB7 (io), F1 PK2 (io), F12 PB6 (io), F13 PI3 (io), G1 PF5 (io), G2 PF4 (io), G11 PI2 (io), G12 PI1 (io), G13 PI0 (io), H1 PF7 (io), H2 PF6 (io), H12 PA9 (io), H13 PA8 (io), J11 PA7 (io), J12 PA6 (io), J13 PA5 (io), K1 HFXTAL_N (out), K12 PA4 (io), K13 PA3 (io), L1 HFXTAL_P (out), L10 BODEN, L12 PA2 (io), L13 PA1 (io), M1 RESETN (in), M9 PD9 (io), M10 PD11 (io), M11 PD13 (io), M13 PA0 (io), N6 2G4RF_ION (in), N7 2G4RF_IOP (in), N9 PD8 (io), N10 PD10 (io), N11 PD12 (io), N12 PD14 (io), N13 PD15 (io)
part B pins: A10 DVDD (power), A11 VREGVDD (power), A12 VREGSW (power), A13 VREGVSS (power), B10 IOVDD (power), B11 VREGVSS (power), B12 VREGVSS (power), B13 AVDD (power), E5 VSS (power), E6 VSS (power), E7 VSS (power), E8 VSS (power), E9 VSS (power), F2 IOVDD (power), F5 VSS (power), F6 VSS (power), F7 VSS (power), F8 VSS (power), F9 VSS (power), F11 IOVDD (power), G5 VSS (power), G6 VSS (power), G7 VSS (power), G8 VSS (power), G9 VSS (power), H5 VSS (power), H6 VSS (power), H7 VSS (power), H8 VSS (power), H9 VSS (power), J1 RFVDD (power), J2 RFVDD (power), J5 VSS (power), J6 VSS (power), J7 VSS (power), J8 VSS (power), J9 VSS (power), K2 VSS (power), L2 VSS (power), M2 RFVSS (power), M3 RFVSS (power), M4 RFVSS (power), M5 RFVSS (power), M6 PAVSS (power), M7 PAVSS (power), M8 PAVDD (power), M12 IOVDD (power), N1 NC, N2 NC, N3 NC, N4 NC, N5 RFVSS (power), N8 PAVDD (power)
part A text: 1 of 2
part B text: 2 of 2

## EFR32MG12P433F00
designator U?
No Description Available; RefDes: RefDes; Type: Type
footprint QFN48B_7X7
part A pins: 1 PF0 (io), 2 PF1 (io), 3 PF2 (io), 4 PF3 (io), 5 PF4 (io), 6 PF5 (io), 7 PF6 (io), 8 PF7 (io), 10 HFXTAL_N (in), 11 HFXTAL_P (out), 12 RESETN (in), 13 SUBGRF_OP (out), 14 SUBGRF_ON (out), 15 SUBGRF_IP (in), 16 SUBGRF_IN (in), 19 2G4RF_ION (io), 20 2G4RF_IOP (io), 22 PD13 (io), 23 PD14 (io), 24 PD15 (io), 25 PA0 (io), 26 PA1 (io), 27 PA2 (io), 28 PA3 (io), 29 PA4 (io), 30 PA5 (io), 31 PB11 (io), 32 PB12 (io), 33 PB13 (io), 35 PB14 (io), 36 PB15 (io), 41 DECOUPLE (out), 43 PC6 (io), 44 PC7 (io), 45 PC8 (io), 46 PC9 (io), 47 PC10 (io), 48 PC11 (io)
part B pins: 9 RFVDD (power), 17 RFVSS (power), 18 PAVSS (power), 21 PAVDD (power), 34 AVDD (power), 37 VREGVSS (power), 38 VREGSW (power), 39 VREGVDD (power), 40 DVDD (power), 42 IOVDD (power), 49 VSS (power)
part B text: 2 of 2

## EFR32MG12P433F01
designator U?
No Description Available; RefDes: RefDes; Type: Type
footprint QFN68_8X8
part A pins: 1 PC5 (io), 2 PF0 (io), 3 PF1 (io), 4 PF2 (io), 5 PF3 (io), 6 PF8 (io), 7 PF9 (io), 8 PF10 (io), 10 PF4 (io), 11 PF5 (io), 12 PF6 (io), 13 PF7 (io), 15 HFXTAL_N (io), 16 HFXTAL_P (io), 17 RESETN (in), 18 SUBGRF_OP (io), 19 SUBGRF_ON (io), 20 SUBGRF_IP (io), 21 SUBGRF_IN (io), 24 2G4RF_ION (io), 25 2G4RF_IOP (io), 27 PD8 (io), 28 PD9 (io), 29 PD10 (io), 30 PD11 (io), 31 PD12 (io), 32 PD13 (io), 33 PD14 (io), 34 PD15 (io), 35 PA0 (io), 36 PA1 (io), 37 PA2 (io), 38 PA3 (io), 39 PA4 (io), 40 PA5 (io), 42 PB7 (io), 43 PB8 (io), 44 PB9 (io), 45 PB10 (io), 46 PB11 (io), 47 PB12 (io), 48 PB13 (io), 50 PB14 (io), 51 PB15 (io), 56 DECOUPLE (out), 58 PC6 (io), 59 PC7 (io), 60 PC8 (io), 61 PC9 (io), 62 PC10 (io), 63 PC11 (io), 64 PC0 (io), 65 PC1 (io), 66 PC2 (io), 67 PC3 (io), 68 PC4 (io)
part B pins: 9 IOVDD (power), 14 RFVDD (power), 22 RFVSS (power), 23 PAVSS (power), 26 PAVDD (power), 41 IOVDD (power), 49 AVDD (power), 52 VREGVSS (power), 53 VREGSW (power), 54 VREGVDD (power), 55 DVDD (power), 57 IOVDD (power), 69 VSS (power)
part B text: 2 of 2

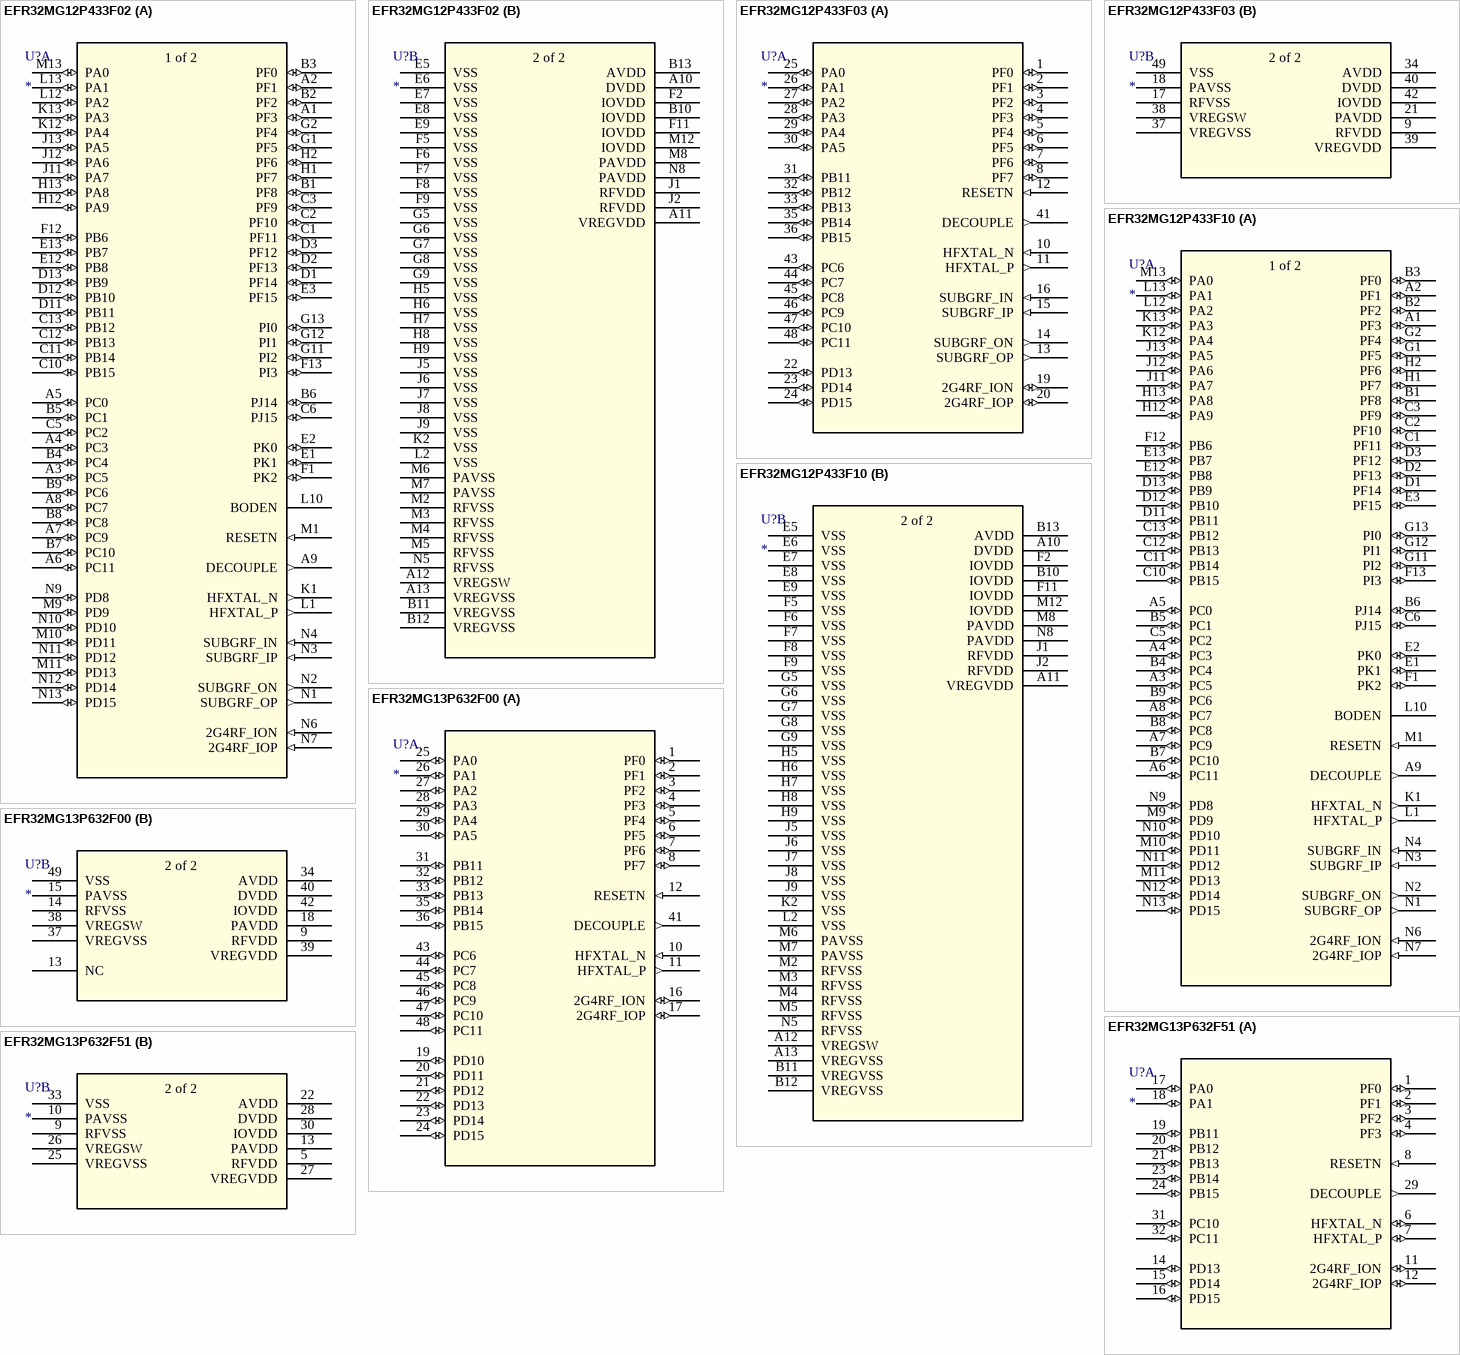
[diagram p6: symbols EFR32MG12P433F02 to EFR32MG13P632F51]

## EFR32MG12P433F02
designator U?
No Description Available; RefDes: RefDes; Type: Type
footprint BGA125_7X7
part A pins: A1 PF3 (io), A2 PF1 (io), A3 PC5 (io), A4 PC3 (io), A5 PC0 (io), A6 PC11 (io), A7 PC9 (io), A8 PC7 (io), A9 DECOUPLE (out), B1 PF8 (io), B2 PF2 (io), B3 PF0 (io), B4 PC4 (io), B5 PC1 (io), B6 PJ14 (io), B7 PC10 (io), B8 PC8 (io), B9 PC6 (io), C1 PF11 (io), C2 PF10 (io), C3 PF9 (io), C5 PC2 (io), C6 PJ15 (io), C10 PB15 (io), C11 PB14 (io), C12 PB13 (io), C13 PB12 (io), D1 PF14 (io), D2 PF13 (io), D3 PF12 (io), D11 PB11 (io), D12 PB10 (io), D13 PB9 (io), E1 PK1 (io), E2 PK0 (io), E3 PF15 (io), E12 PB8 (io), E13 PB7 (io), F1 PK2 (io), F12 PB6 (io), F13 PI3 (io), G1 PF5 (io), G2 PF4 (io), G11 PI2 (io), G12 PI1 (io), G13 PI0 (io), H1 PF7 (io), H2 PF6 (io), H12 PA9 (io), H13 PA8 (io), J11 PA7 (io), J12 PA6 (io), J13 PA5 (io), K1 HFXTAL_N (out), K12 PA4 (io), K13 PA3 (io), L1 HFXTAL_P (out), L10 BODEN, L12 PA2 (io), L13 PA1 (io), M1 RESETN (in), M9 PD9 (io), M10 PD11 (io), M11 PD13 (io), M13 PA0 (io), N1 SUBGRF_OP (out), N2 SUBGRF_ON (out), N3 SUBGRF_IP (in), N4 SUBGRF_IN (in), N6 2G4RF_ION (in), N7 2G4RF_IOP (in), N9 PD8 (io), N10 PD10 (io), N11 PD12 (io), N12 PD14 (io), N13 PD15 (io)
part B pins: A10 DVDD (power), A11 VREGVDD (power), A12 VREGSW (power), A13 VREGVSS (power), B10 IOVDD (power), B11 VREGVSS (power), B12 VREGVSS (power), B13 AVDD (power), E5 VSS (power), E6 VSS (power), E7 VSS (power), E8 VSS (power), E9 VSS (power), F2 IOVDD (power), F5 VSS (power), F6 VSS (power), F7 VSS (power), F8 VSS (power), F9 VSS (power), F11 IOVDD (power), G5 VSS (power), G6 VSS (power), G7 VSS (power), G8 VSS (power), G9 VSS (power), H5 VSS (power), H6 VSS (power), H7 VSS (power), H8 VSS (power), H9 VSS (power), J1 RFVDD (power), J2 RFVDD (power), J5 VSS (power), J6 VSS (power), J7 VSS (power), J8 VSS (power), J9 VSS (power), K2 VSS (power), L2 VSS (power), M2 RFVSS (power), M3 RFVSS (power), M4 RFVSS (power), M5 RFVSS (power), M6 PAVSS (power), M7 PAVSS (power), M8 PAVDD (power), M12 IOVDD (power), N5 RFVSS (power), N8 PAVDD (power)
part A text: 1 of 2
part B text: 2 of 2

## EFR32MG12P433F03
designator U?
No Description Available; RefDes: RefDes; Type: Type
footprint QFN48B_7X7
part A pins: 1 PF0 (io), 2 PF1 (io), 3 PF2 (io), 4 PF3 (io), 5 PF4 (io), 6 PF5 (io), 7 PF6 (io), 8 PF7 (io), 10 HFXTAL_N (in), 11 HFXTAL_P (out), 12 RESETN (in), 13 SUBGRF_OP (out), 14 SUBGRF_ON (out), 15 SUBGRF_IP (in), 16 SUBGRF_IN (in), 19 2G4RF_ION (io), 20 2G4RF_IOP (io), 22 PD13 (io), 23 PD14 (io), 24 PD15 (io), 25 PA0 (io), 26 PA1 (io), 27 PA2 (io), 28 PA3 (io), 29 PA4 (io), 30 PA5 (io), 31 PB11 (io), 32 PB12 (io), 33 PB13 (io), 35 PB14 (io), 36 PB15 (io), 41 DECOUPLE (out), 43 PC6 (io), 44 PC7 (io), 45 PC8 (io), 46 PC9 (io), 47 PC10 (io), 48 PC11 (io)
part B pins: 9 RFVDD (power), 17 RFVSS (power), 18 PAVSS (power), 21 PAVDD (power), 34 AVDD (power), 37 VREGVSS (power), 38 VREGSW (power), 39 VREGVDD (power), 40 DVDD (power), 42 IOVDD (power), 49 VSS (power)
part B text: 2 of 2

## EFR32MG12P433F10
designator U?
No Description Available; RefDes: RefDes; Type: Type
footprint BGA125_7X7
part A pins: A1 PF3 (io), A2 PF1 (io), A3 PC5 (io), A4 PC3 (io), A5 PC0 (io), A6 PC11 (io), A7 PC9 (io), A8 PC7 (io), A9 DECOUPLE (out), B1 PF8 (io), B2 PF2 (io), B3 PF0 (io), B4 PC4 (io), B5 PC1 (io), B6 PJ14 (io), B7 PC10 (io), B8 PC8 (io), B9 PC6 (io), C1 PF11 (io), C2 PF10 (io), C3 PF9 (io), C5 PC2 (io), C6 PJ15 (io), C10 PB15 (io), C11 PB14 (io), C12 PB13 (io), C13 PB12 (io), D1 PF14 (io), D2 PF13 (io), D3 PF12 (io), D11 PB11 (io), D12 PB10 (io), D13 PB9 (io), E1 PK1 (io), E2 PK0 (io), E3 PF15 (io), E12 PB8 (io), E13 PB7 (io), F1 PK2 (io), F12 PB6 (io), F13 PI3 (io), G1 PF5 (io), G2 PF4 (io), G11 PI2 (io), G12 PI1 (io), G13 PI0 (io), H1 PF7 (io), H2 PF6 (io), H12 PA9 (io), H13 PA8 (io), J11 PA7 (io), J12 PA6 (io), J13 PA5 (io), K1 HFXTAL_N (out), K12 PA4 (io), K13 PA3 (io), L1 HFXTAL_P (out), L10 BODEN, L12 PA2 (io), L13 PA1 (io), M1 RESETN (in), M9 PD9 (io), M10 PD11 (io), M11 PD13 (io), M13 PA0 (io), N1 SUBGRF_OP (out), N2 SUBGRF_ON (out), N3 SUBGRF_IP (in), N4 SUBGRF_IN (in), N6 2G4RF_ION (in), N7 2G4RF_IOP (in), N9 PD8 (io), N10 PD10 (io), N11 PD12 (io), N12 PD14 (io), N13 PD15 (io)
part B pins: A10 DVDD (power), A11 VREGVDD (power), A12 VREGSW (power), A13 VREGVSS (power), B10 IOVDD (power), B11 VREGVSS (power), B12 VREGVSS (power), B13 AVDD (power), E5 VSS (power), E6 VSS (power), E7 VSS (power), E8 VSS (power), E9 VSS (power), F2 IOVDD (power), F5 VSS (power), F6 VSS (power), F7 VSS (power), F8 VSS (power), F9 VSS (power), F11 IOVDD (power), G5 VSS (power), G6 VSS (power), G7 VSS (power), G8 VSS (power), G9 VSS (power), H5 VSS (power), H6 VSS (power), H7 VSS (power), H8 VSS (power), H9 VSS (power), J1 RFVDD (power), J2 RFVDD (power), J5 VSS (power), J6 VSS (power), J7 VSS (power), J8 VSS (power), J9 VSS (power), K2 VSS (power), L2 VSS (power), M2 RFVSS (power), M3 RFVSS (power), M4 RFVSS (power), M5 RFVSS (power), M6 PAVSS (power), M7 PAVSS (power), M8 PAVDD (power), M12 IOVDD (power), N5 RFVSS (power), N8 PAVDD (power)
part A text: 1 of 2
part B text: 2 of 2

## EFR32MG13P632F00
designator U?
No Description Available; RefDes: RefDes; Type: Type
footprint QFN48B_7X7
part A pins: 1 PF0 (io), 2 PF1 (io), 3 PF2 (io), 4 PF3 (io), 5 PF4 (io), 6 PF5 (io), 7 PF6 (io), 8 PF7 (io), 10 HFXTAL_N (in), 11 HFXTAL_P (out), 12 RESETN (in), 16 2G4RF_ION (io), 17 2G4RF_IOP (io), 19 PD10 (io), 20 PD11 (io), 21 PD12 (io), 22 PD13 (io), 23 PD14 (io), 24 PD15 (io), 25 PA0 (io), 26 PA1 (io), 27 PA2 (io), 28 PA3 (io), 29 PA4 (io), 30 PA5 (io), 31 PB11 (io), 32 PB12 (io), 33 PB13 (io), 35 PB14 (io), 36 PB15 (io), 41 DECOUPLE (out), 43 PC6 (io), 44 PC7 (io), 45 PC8 (io), 46 PC9 (io), 47 PC10 (io), 48 PC11 (io)
part B pins: 9 RFVDD (power), 13 NC, 14 RFVSS (power), 15 PAVSS (power), 18 PAVDD (power), 34 AVDD (power), 37 VREGVSS (power), 38 VREGSW (power), 39 VREGVDD (power), 40 DVDD (power), 42 IOVDD (power), 49 VSS (power)
part B text: 2 of 2

## EFR32MG13P632F51
designator U?
No Description Available; RefDes: RefDes; Type: Type
footprint RQFN32_5X5
part A pins: 1 PF0 (io), 2 PF1 (io), 3 PF2 (io), 4 PF3 (io), 6 HFXTAL_N (io), 7 HFXTAL_P (io), 8 RESETN (in), 11 2G4RF_ION (io), 12 2G4RF_IOP (io), 14 PD13 (io), 15 PD14 (io), 16 PD15 (io), 17 PA0 (io), 18 PA1 (io), 19 PB11 (io), 20 PB12 (io), 21 PB13 (io), 23 PB14 (io), 24 PB15 (io), 29 DECOUPLE (out), 31 PC10 (io), 32 PC11 (io)
part B pins: 5 RFVDD (power), 9 RFVSS (power), 10 PAVSS (power), 13 PAVDD (power), 22 AVDD (power), 25 VREGVSS (power), 26 VREGSW (power), 27 VREGVDD (power), 28 DVDD (power), 30 IOVDD (power), 33 VSS (power)
part B text: 2 of 2

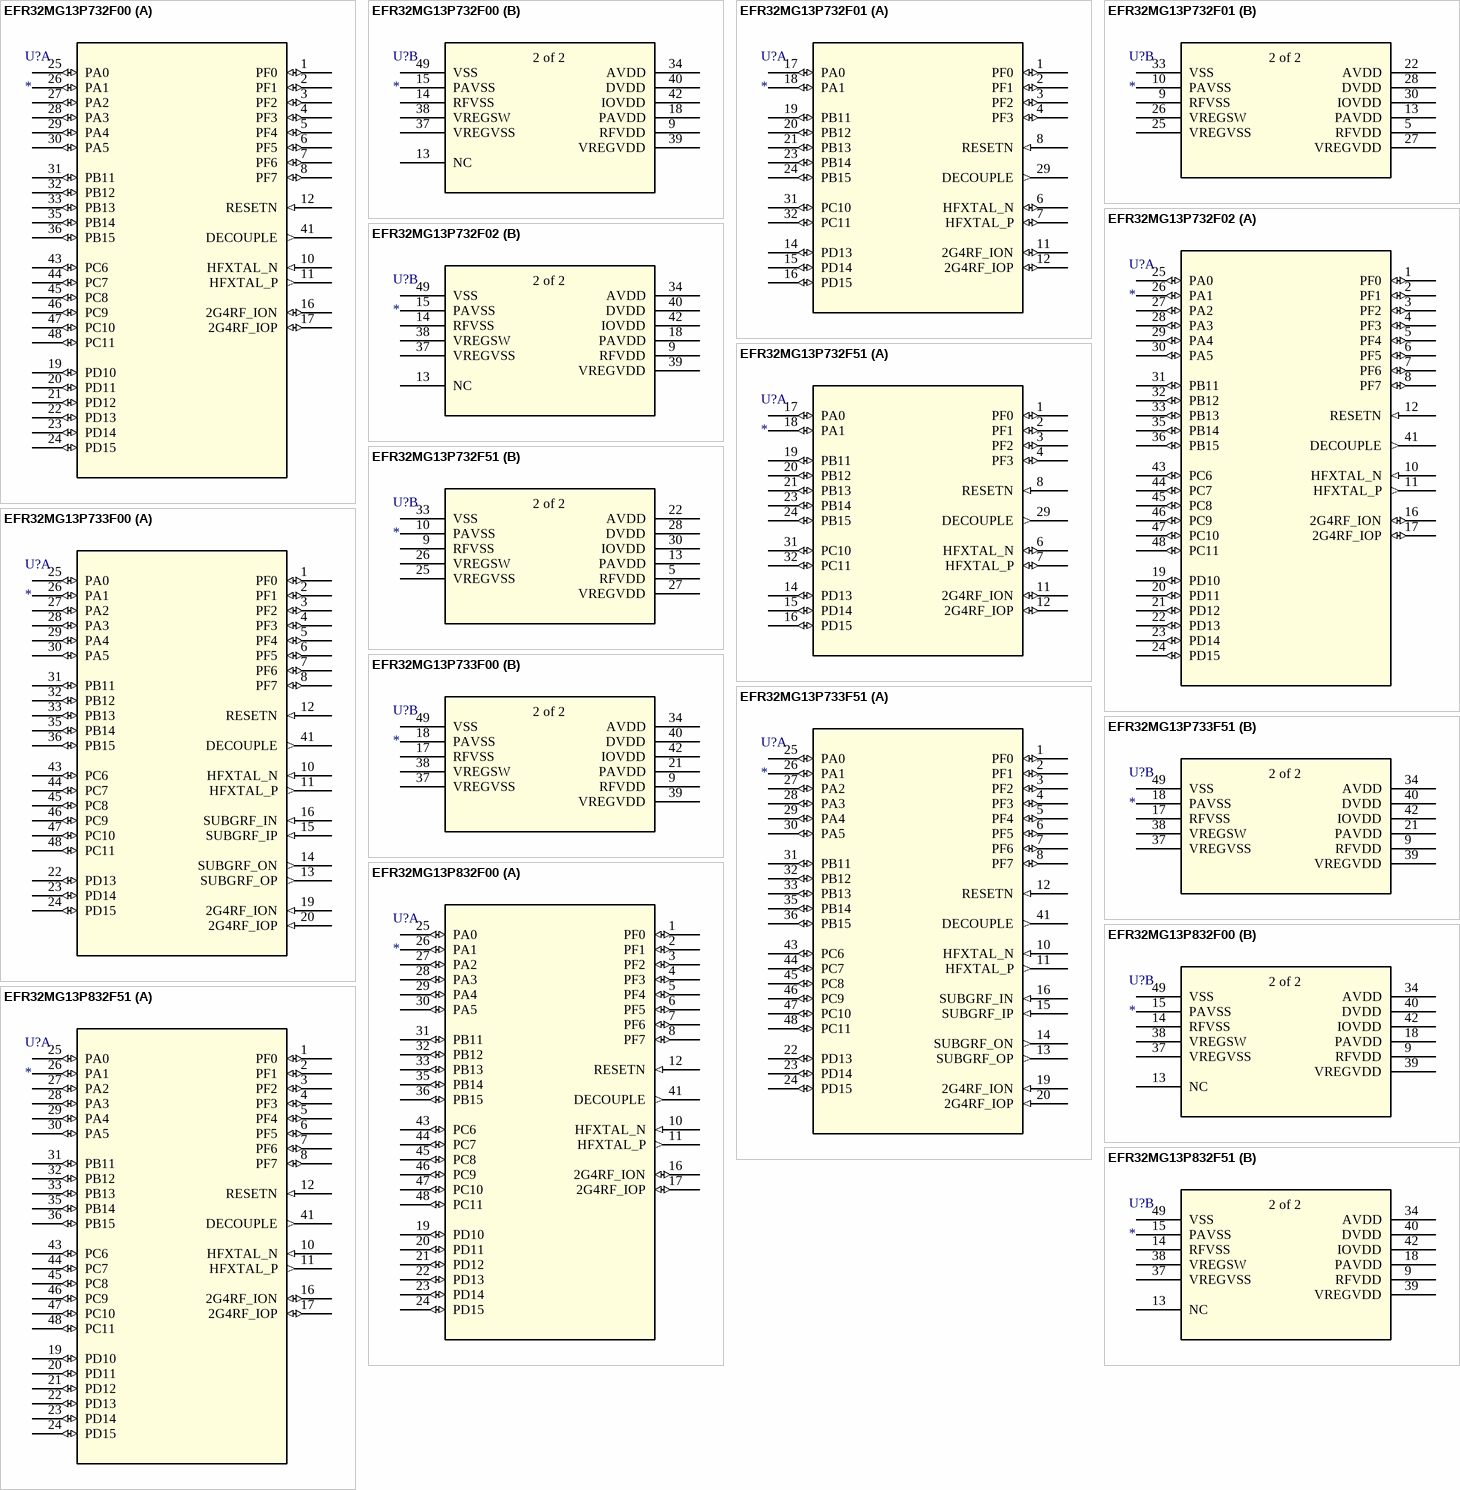
[diagram p7: symbols EFR32MG13P732F00 to EFR32MG13P832F51]

## EFR32MG13P732F00
designator U?
No Description Available; RefDes: RefDes; Type: Type
footprint QFN48B_7X7
part A pins: 1 PF0 (io), 2 PF1 (io), 3 PF2 (io), 4 PF3 (io), 5 PF4 (io), 6 PF5 (io), 7 PF6 (io), 8 PF7 (io), 10 HFXTAL_N (in), 11 HFXTAL_P (out), 12 RESETN (in), 16 2G4RF_ION (io), 17 2G4RF_IOP (io), 19 PD10 (io), 20 PD11 (io), 21 PD12 (io), 22 PD13 (io), 23 PD14 (io), 24 PD15 (io), 25 PA0 (io), 26 PA1 (io), 27 PA2 (io), 28 PA3 (io), 29 PA4 (io), 30 PA5 (io), 31 PB11 (io), 32 PB12 (io), 33 PB13 (io), 35 PB14 (io), 36 PB15 (io), 41 DECOUPLE (out), 43 PC6 (io), 44 PC7 (io), 45 PC8 (io), 46 PC9 (io), 47 PC10 (io), 48 PC11 (io)
part B pins: 9 RFVDD (power), 13 NC, 14 RFVSS (power), 15 PAVSS (power), 18 PAVDD (power), 34 AVDD (power), 37 VREGVSS (power), 38 VREGSW (power), 39 VREGVDD (power), 40 DVDD (power), 42 IOVDD (power), 49 VSS (power)
part B text: 2 of 2

## EFR32MG13P732F01
designator U?
No Description Available; RefDes: RefDes; Type: Type
footprint RQFN32_5X5
part A pins: 1 PF0 (io), 2 PF1 (io), 3 PF2 (io), 4 PF3 (io), 6 HFXTAL_N (io), 7 HFXTAL_P (io), 8 RESETN (in), 11 2G4RF_ION (io), 12 2G4RF_IOP (io), 14 PD13 (io), 15 PD14 (io), 16 PD15 (io), 17 PA0 (io), 18 PA1 (io), 19 PB11 (io), 20 PB12 (io), 21 PB13 (io), 23 PB14 (io), 24 PB15 (io), 29 DECOUPLE (out), 31 PC10 (io), 32 PC11 (io)
part B pins: 5 RFVDD (power), 9 RFVSS (power), 10 PAVSS (power), 13 PAVDD (power), 22 AVDD (power), 25 VREGVSS (power), 26 VREGSW (power), 27 VREGVDD (power), 28 DVDD (power), 30 IOVDD (power), 33 VSS (power)
part B text: 2 of 2

## EFR32MG13P732F02
designator U?
No Description Available; RefDes: RefDes; Type: Type
footprint QFN48B_7X7
part A pins: 1 PF0 (io), 2 PF1 (io), 3 PF2 (io), 4 PF3 (io), 5 PF4 (io), 6 PF5 (io), 7 PF6 (io), 8 PF7 (io), 10 HFXTAL_N (in), 11 HFXTAL_P (out), 12 RESETN (in), 16 2G4RF_ION (io), 17 2G4RF_IOP (io), 19 PD10 (io), 20 PD11 (io), 21 PD12 (io), 22 PD13 (io), 23 PD14 (io), 24 PD15 (io), 25 PA0 (io), 26 PA1 (io), 27 PA2 (io), 28 PA3 (io), 29 PA4 (io), 30 PA5 (io), 31 PB11 (io), 32 PB12 (io), 33 PB13 (io), 35 PB14 (io), 36 PB15 (io), 41 DECOUPLE (out), 43 PC6 (io), 44 PC7 (io), 45 PC8 (io), 46 PC9 (io), 47 PC10 (io), 48 PC11 (io)
part B pins: 9 RFVDD (power), 13 NC, 14 RFVSS (power), 15 PAVSS (power), 18 PAVDD (power), 34 AVDD (power), 37 VREGVSS (power), 38 VREGSW (power), 39 VREGVDD (power), 40 DVDD (power), 42 IOVDD (power), 49 VSS (power)
part B text: 2 of 2